# Altium schematic symbol library Master.SchLib: 262 symbols (part 2 of 2)
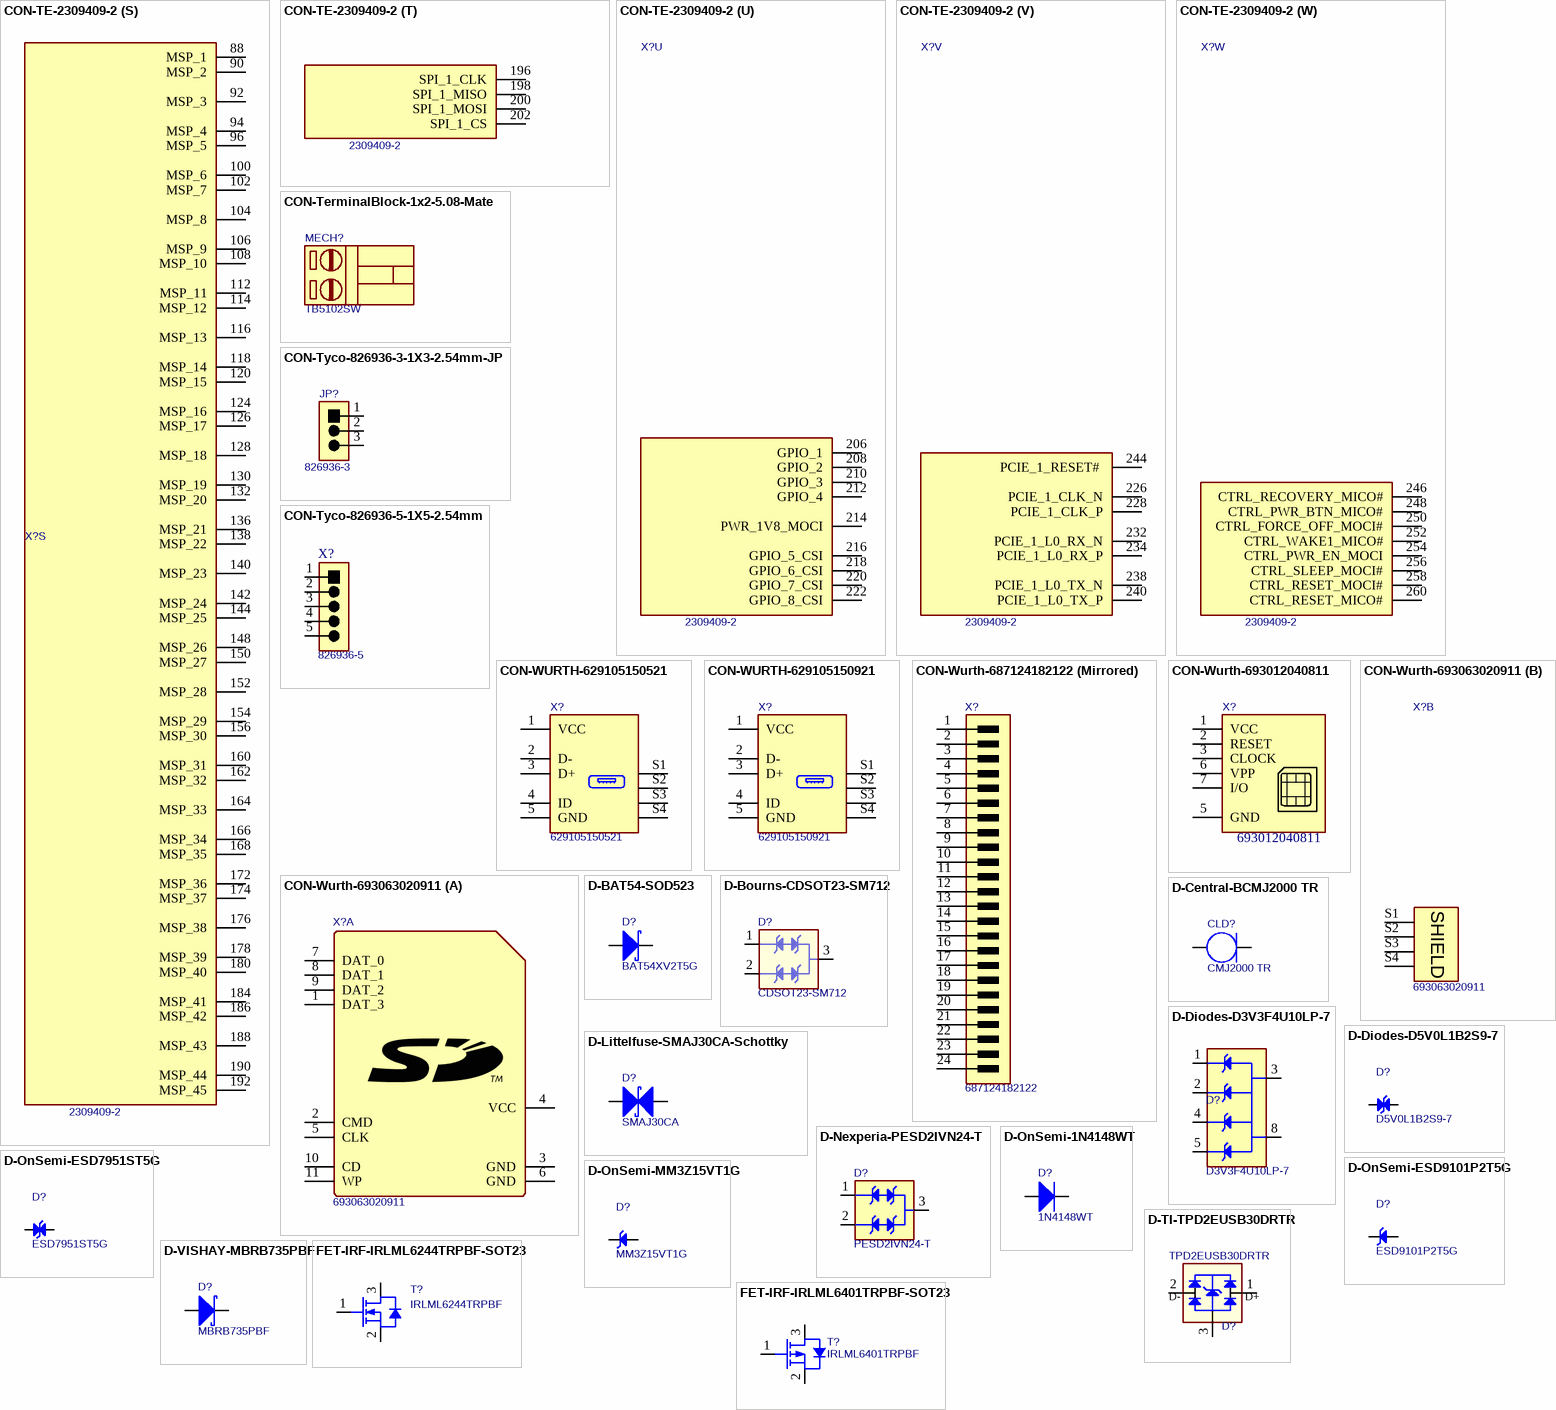
[diagram p18: symbols CON-TE-2309409-2 to FET-IRF-IRLML6401TRPBF-SOT23]

## D-OnSemi-1N4148WT
designator D?, comment 1N4148WT
Diode Standard 75V 200mA Surface Mount SOD-523F; Manufacturer Name: On Semi; Manufacturer Part No.: 1N4148WT
footprint SOD-523F (SOD-523F 2-Leads, Body 0.80x1.60mm, IPC Medium Density)
pins: A, C

## D-OnSemi-ESD7951ST5G
designator D?, comment ESD7951ST5G
BIDIRECTIONAL TVS DIODE 5V 12.9V SOD923; Manufacturer Name: OnSemi; Manufacturer Part No.: ESD7951ST5G
footprint SOD-923 (SOD-923, 2-Leads, Body 0.60x1.00mm, IPC Medium Density)
pins: 1 C (power), 2 A (power)

## D-OnSemi-ESD9101P2T5G
designator D?, comment ESD9101P2T5G
ESD Protection Diode; Manufacturer Name: OnSemi; Manufacturer Part No.: ESD9101P2T5G
footprint SOD-923 (SOD-923, 2-Leads, Body 0.60x1.00mm, IPC Medium Density)
pins: 1 C (power), 2 A (power)

## D-OnSemi-MM3Z15VT1G
designator D?, comment MM3Z15VT1G
Zener Diode, Vz=15V, 300mW, SOD-323; Manufacturer Name: ON Semiconductor; Manufacturer Part No.: MM3Z15VT1G
footprint T_SOD-323 (SOD-323, SMD, 2 pins)
pins: 1 C (power), 2 A (power)

## D-TI-TPD2EUSB30DRTR
designator D?, comment TPD2EUSB30DRTR
2 Channel Protection for Super Speed USB3.0; Manufacturer Name: TI; Manufacturer Part No.: TPD2EUSB30DRTR
footprint T_TI_TPD2EUSB30DRTR (2 CHANNEL PROTECTION SOLUTION FOR SUPER-SPEED)
pins: 1 D+ (power), 2 D- (power), 3 (power)

## D-VISHAY-MBRB735PBF
designator D?, comment MBRB735PBF
MBRB735PBF Schottky Diode; Manufacturer Name: Vishay; Manufacturer Part No.: MBRB735PBF
footprint T_VISHAY_MBRB735PBF
pins: 2, 3

## FET-IRF-IRLML6244TRPBF-SOT23
designator T?, comment IRLML6244TRPBF
N-channel +12V / 5.1A / 21mohm; Manufacturer Name: International Rectifier; Manufacturer Part No.: IRLML6244TRPBF
footprint SOT95P237X112-3N (SOT23, 3-Leads, Body 3.0x2.6mm (max), Pitch 0.95mm, IPC Medium Density)
pins: 1 G, 2 S, 3 D

## FET-IRF-IRLML6401TRPBF-SOT23
designator T?, comment IRLML6401TRPBF
P-channel -12V / 3.4A / 50mohm; Manufacturer Name: International Rectifier; Manufacturer Part No.: IRLML6401TRPBF
footprint SOT95P237X112-3N (SOT23, 3-Leads, Body 3.0x2.6mm (max), Pitch 0.95mm, IPC Medium Density)
pins: 1 G, 2 S, 3 D

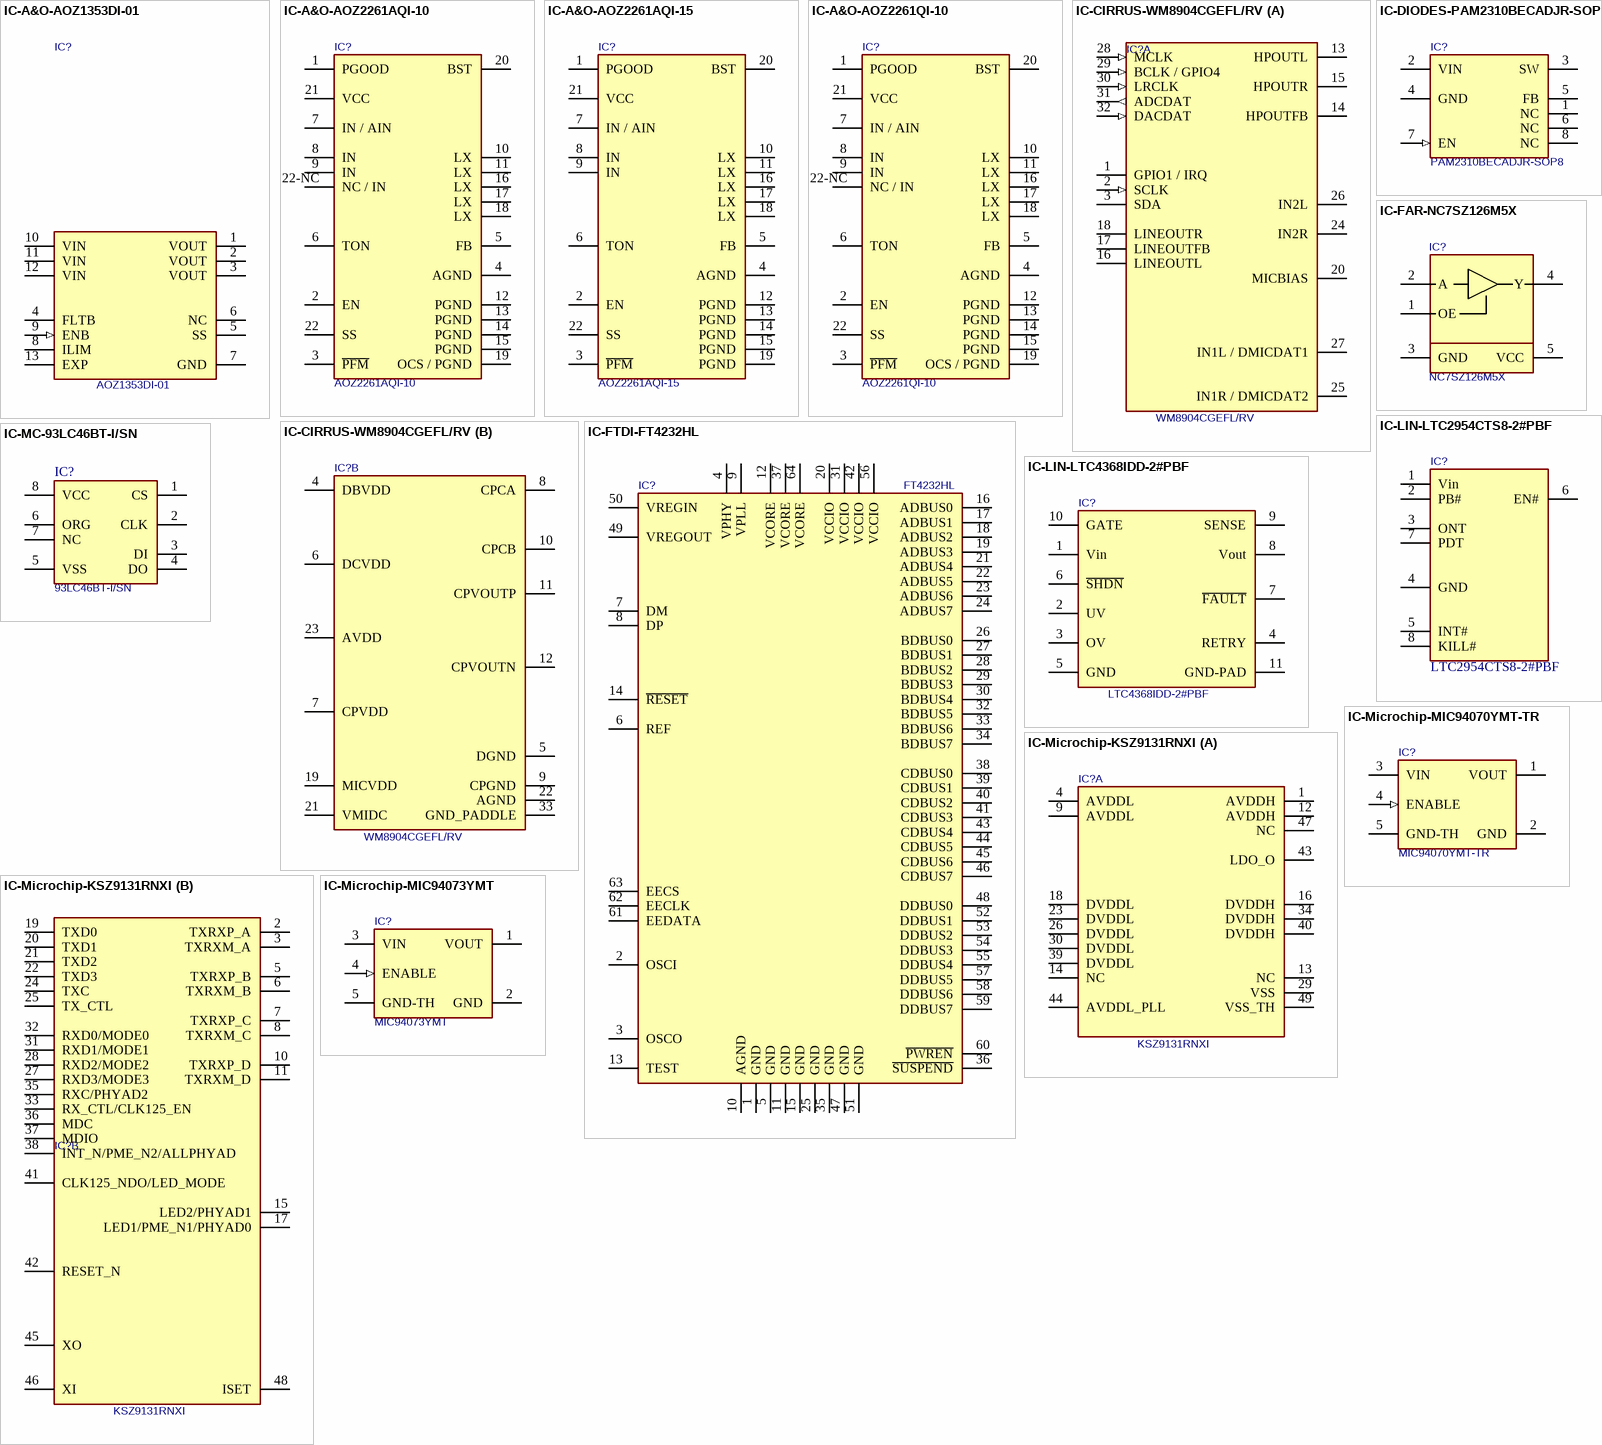
[diagram p12: symbols IC-A&O-AOZ1353DI-01 to IC-Microchip-MIC94073YMT]

## IC-A&O-AOZ1353DI-01
designator IC?, comment AOZ1353DI-01
5V/3A  Smart Current Limited Load Switch with True Reverse Current Blocking; Manufacturer Name: Alpha and Omega; Manufacturer Part No.: AOZ1353DI-01
footprint IC-A&O-AOZ1353DI-01 (PSON, 12-Leads, Body 3.00x3.00mm, Pitch 0.50mm, Thermal Pad 2.50x1.50mm, IPC Medium Density)
pins: 1 VOUT (power), 2 VOUT (power), 3 VOUT (power), 4 FLTB, 5 SS, 6 NC, 7 GND (power), 8 ILIM, 9 ENB (in), 10 VIN (power), 11 VIN (power), 12 VIN (power), 13 EXP (power)

## IC-A&O-AOZ2261AQI-10
designator IC?, comment AOZ2261AQI-10
8A (Iout(max)) Synchronous Buck Regulator, QFN-22L (4mmx 4mm), Vin = 4V to 28V; Manufacturer Name: Alpha and Omega; Manufacturer Part No.: AOZ2261AQI-10
footprint T_QFN50P400X400X100-23N (AOZ226x) - PIN22-NC_NOPASTE (QFN, 23-Leads, Body 4.1x4.1mm (max), Pitch 0.50mm, IPC Medium Density)
footprint T_QFN50P400X400X100-22N (QFN, 22-Leads, Body 4.1x4.1mm (max), Pitch 0.50mm, IPC Medium Density)
pins: 1 PGOOD (power), 2 EN (power), 3 ~{PFM} (power), 4 AGND (power), 5 FB (power), 6 TON (power), 7 IN / AIN (power), 8 IN (power), 9 IN (power), 10 LX (power), 11 LX (power), 12 PGND (power), 13 PGND (power), 14 PGND (power), 15 PGND (power), 16 LX (power), 17 LX (power), 18 LX (power), 19 OCS / PGND (power), 20 BST (power), 21 VCC (power), 22 SS (power), 22-NC NC / IN (power)

## IC-A&O-AOZ2261AQI-15
designator IC?, comment AOZ2261AQI-15
8A (Iout(max)) Synchronous Buck Regulator, QFN-22L (4mmx 4mm), Vin = 4V to 28V; Manufacturer Name: Alpha and Omega; Manufacturer Part No.: AOZ2261AQI-15
footprint T_QFN50P400X400X100-22N
pins: 1 PGOOD (power), 2 EN (power), 3 ~{PFM} (power), 4 AGND (power), 5 FB (power), 6 TON (power), 7 IN / AIN (power), 8 IN (power), 9 IN (power), 10 LX (power), 11 LX (power), 12 PGND (power), 13 PGND (power), 14 PGND (power), 15 PGND (power), 16 LX (power), 17 LX (power), 18 LX (power), 19 PGND (power), 20 BST (power), 21 VCC (power), 22 SS (power)

## IC-A&O-AOZ2261QI-10
designator IC?, comment AOZ2261QI-10
8A (Iout(max)) Synchronous Buck Regulator, QFN-22L (4mmx 4mm), Vin = 6.5V to 28V; Manufacturer Name: Alpha and Omega; Manufacturer Part No.: AOZ2261QI-10
footprint T_QFN50P400X400X100-23N (AOZ226x) - PIN22-NC_NOPASTE (QFN, 23-Leads, Body 4.1x4.1mm (max), Pitch 0.50mm, IPC Medium Density)
footprint T_QFN50P400X400X100-22N (QFN, 22-Leads, Body 4.1x4.1mm (max), Pitch 0.50mm, IPC Medium Density)
pins: 1 PGOOD (power), 2 EN (power), 3 ~{PFM} (power), 4 AGND (power), 5 FB (power), 6 TON (power), 7 IN / AIN (power), 8 IN (power), 9 IN (power), 10 LX (power), 11 LX (power), 12 PGND (power), 13 PGND (power), 14 PGND (power), 15 PGND (power), 16 LX (power), 17 LX (power), 18 LX (power), 19 OCS / PGND (power), 20 BST (power), 21 VCC (power), 22 SS (power), 22-NC NC / IN (power)

## IC-CIRRUS-WM8904CGEFL/RV
designator IC?, comment WM8904CGEFL/RV
Stereo Audio Interface IC; Manufacturer Name: CIRRUS; Package: *; Temperature Range: *; Manufacturer Part No.: WM8904CGEFL/RV
footprint IC-QFN40P400X400X80_HS-33N (QFN, 32-Leads, Body 4.00x4.00mm, Pitch 0.40mm, Thermal Pad 2.70x2.70mm, IPC Medium Density)
part A pins: 1 GPIO1 / IRQ, 2 SCLK (in), 3 SDA, 13 HPOUTL, 14 HPOUTFB, 15 HPOUTR, 16 LINEOUTL, 17 LINEOUTFB, 18 LINEOUTR, 20 MICBIAS, 24 IN2R, 25 IN1R / DMICDAT2, 26 IN2L, 27 IN1L / DMICDAT1, 28 MCLK (in), 29 BCLK / GPIO4 (in), 30 LRCLK (in), 31 ADCDAT (out), 32 DACDAT (in)
part B pins: 4 DBVDD, 5 DGND, 6 DCVDD, 7 CPVDD, 8 CPCA, 9 CPGND, 10 CPCB, 11 CPVOUTP, 12 CPVOUTN, 19 MICVDD, 21 VMIDC, 22 AGND, 23 AVDD, 33 GND_PADDLE

## IC-DIODES-PAM2310BECADJR-SOP8
designator IC?, comment Manufacturer Part No.: PAM2310BECADJR-SOP8  (hidden comment: PAM2310BECADJR)
Integrated Buck Regulator; Manufacturer Name: Diodes
footprint IC-SO-8EP
pins: 1 NC (power), 2 VIN (power), 3 SW (power), 4 GND (power), 5 FB (power), 6 NC (power), 7 EN (in), 8 NC (power)

## IC-FAR-NC7SZ126M5X
designator IC?, comment NC7SZ126M5X
NC7SZ126M5X  Buffer Three-State Output; Manufacturer Name: Fairchild Semiconductor; Manufacturer Part No.: NC7SZ126M5X
footprint SOT95P279X142-5N
pins: 1 OE, 2 A, 3 GND, 4 Y, 5 VCC

## IC-FTDI-FT4232HL
designator IC?, comment FT4232HL
Quad High Speed USB to Multipurpose UART/MPSSE; Manufacturer Name: FTDI; Note: Quad USB to UART; Manufacturer Part No.: FT4232HL
footprint LQFP-64
pins: 1 GND, 2 OSCI, 3 OSCO, 4 VPHY, 5 GND, 6 REF, 7 DM, 8 DP, 9 VPLL, 10 AGND, 11 GND, 12 VCORE, 13 TEST, 14 ~{RESET}, 15 GND, 16 ADBUS0, 17 ADBUS1, 18 ADBUS2, 19 ADBUS3, 20 VCCIO, 21 ADBUS4, 22 ADBUS5, 23 ADBUS6, 24 ADBUS7, 25 GND, 26 BDBUS0, 27 BDBUS1, 28 BDBUS2, 29 BDBUS3, 30 BDBUS4, 31 VCCIO, 32 BDBUS5, 33 BDBUS6, 34 BDBUS7, 35 GND, 36 ~{SUSPEND}, 37 VCORE, 38 CDBUS0, 39 CDBUS1, 40 CDBUS2, 41 CDBUS3, 42 VCCIO, 43 CDBUS4, 44 CDBUS5, 45 CDBUS6, 46 CDBUS7, 47 GND, 48 DDBUS0, 49 VREGOUT, 50 VREGIN, 51 GND, 52 DDBUS1, 53 DDBUS2, 54 DDBUS3, 55 DDBUS4, 56 VCCIO, 57 DDBUS5, 58 DDBUS6, 59 DDBUS7, 60 ~{PWREN}, 61 EEDATA, 62 EECLK, 63 EECS, 64 VCORE
2 alternate drawings of the same symbol

## IC-LIN-LTC2954CTS8-2#PBF
designator IC?, comment LTC2954CTS8-2#PBF
Push Button On/Off Controller; Manufacturer Name: Linear; Package: *; Temperature Range: *; Manufacturer Part No.: LTC2954CTS8-2#PBF
footprint T_LINEAR_LTC2954CTS8-2#PBF
pins: 1 Vin, 2 PB#, 3 ONT, 4 GND, 5 INT#, 6 EN#, 7 PDT, 8 KILL#

## IC-LIN-LTC4368IDD-2#PBF
designator IC?, comment LTC4368IDD-2#PBF
Reverse Protection Controller with Bidirectional Circuit Breaker; Manufacturer Name: Linear; Package: *; Temperature Range: *; Manufacturer Part No.: LTC4368IDD-2#PBF
footprint IC-DFN50P300X300X75-10N (DFN, 11-Leads, Body 3.0x3.0mm, Pitch 0.50mm, IPC Medium Density)
pins: 1 Vin, 2 UV, 3 OV, 4 RETRY, 5 GND, 6 ~{SHDN}, 7 ~{FAULT}, 8 Vout, 9 SENSE, 10 GATE, 11 GND-PAD

## IC-MC-93LC46BT-I/SN
designator IC?, comment Manufacturer Part No.: 93LC46BT-I/SN  (hidden comment: 93LC46BT)
EEPROM, 1k, 64x16, serial, SOIC8; Manufacturer Name: Microchip
footprint SOIC127P600X173-8N
pins: 1 CS, 2 CLK, 3 DI, 4 DO, 5 VSS, 6 ORG, 7 NC, 8 VCC

## IC-Microchip-KSZ9131RNXI
designator IC?, comment KSZ9131RNXI
Gigabit Ethernet Transceiver with RGMII (KSZ9131), QFN-48 (7mmx7mm) Leadless, -40C to +85C; Manufacturer Name: Microchip; Temperature Range: -40C to +85C; Manufacturer Part No.: KSZ9131RNXI
footprint IC-QFN50P700X700X90_HS-49N (QFN, 48-Leads, Body 7.00x7.00mm, Pitch 0.50mm, Thermal Pad 5.05x5.05mm, IPC Medium Density)
part A pins: 1 AVDDH (power), 4 AVDDL (power), 9 AVDDL (power), 12 AVDDH (power), 13 NC (power), 14 NC (power), 16 DVDDH (power), 18 DVDDL (power), 23 DVDDL (power), 26 DVDDL (power), 29 VSS (power), 30 DVDDL (power), 34 DVDDH (power), 39 DVDDL (power), 40 DVDDH (power), 43 LDO_O (power), 44 AVDDL_PLL (power), 47 NC (power), 49 VSS_TH (power)
part B pins: 2 TXRXP_A (power), 3 TXRXM_A (power), 5 TXRXP_B (power), 6 TXRXM_B (power), 7 TXRXP_C (power), 8 TXRXM_C (power), 10 TXRXP_D (power), 11 TXRXM_D (power), 15 LED2/PHYAD1 (power), 17 LED1/PME_N1/PHYAD0 (power), 19 TXD0 (power), 20 TXD1 (power), 21 TXD2 (power), 22 TXD3 (power), 24 TXC (power), 25 TX_CTL (power), 27 RXD3/MODE3 (power), 28 RXD2/MODE2 (power), 31 RXD1/MODE1 (power), 32 RXD0/MODE0 (power), 33 RX_CTL/CLK125_EN (power), 35 RXC/PHYAD2 (power), 36 MDC (power), 37 MDIO (power), 38 INT_N/PME_N2/ALLPHYAD (power), 41 CLK125_NDO/LED_MODE (power), 42 RESET_N (power), 45 XO (power), 46 XI (power), 48 ISET (power)

## IC-Microchip-MIC94070YMT-TR
designator IC?, comment MIC94070YMT-TR
High Side Load Switch, TDFN4 1.2 x 1.6; Manufacturer Name: Microchip; Package: TDFN-4; Manufacturer Part No.: MIC94070YMT-TR
footprint T_TDFN0P120X160X60-4N (TDFN, 4-Leads, Body 1.6x1.2mm (max), Pitch 0.50mm, IPC Medium Density)
pins: 1 VOUT (power), 2 GND (power), 3 VIN (power), 4 ENABLE (in), 5 GND-TH (power)

## IC-Microchip-MIC94073YMT
designator IC?, comment MIC94073YMT
High Side Load Switch, TDFN4 1.2 x 1.6; Manufacturer Name: Microchip; Package: TDFN-4; Manufacturer Part No.: MIC94073YMT
footprint T_TDFN0P120X160X60-4N (TDFN, 4-Leads, Body 1.6x1.2mm (max), Pitch 0.50mm, IPC Medium Density)
pins: 1 VOUT (power), 2 GND (power), 3 VIN (power), 4 ENABLE (in), 5 GND-TH (power)

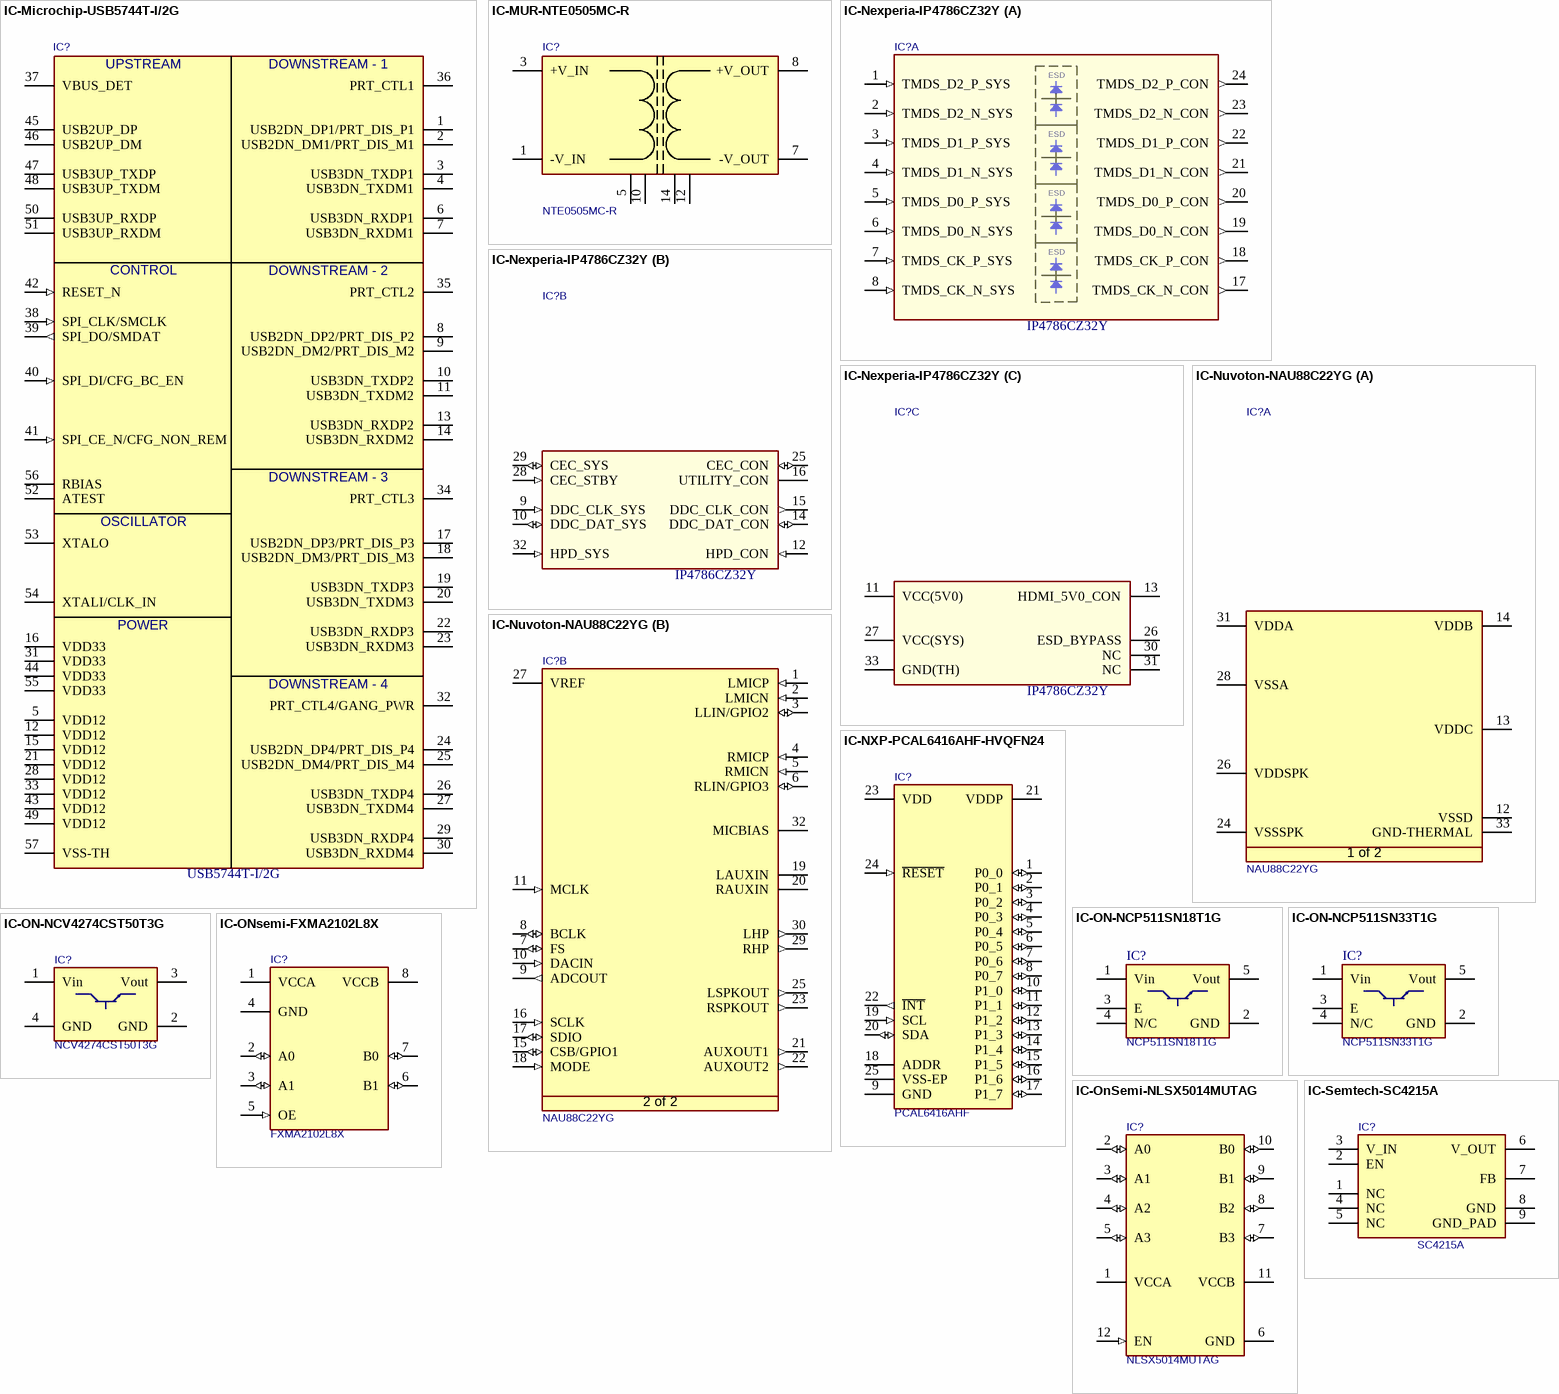
[diagram p13: symbols IC-Microchip-USB5744T-I/2G to IC-Semtech-SC4215A]

## IC-Microchip-USB5744T-I/2G
designator IC?, comment USB5744T-I/2G
4-Port SS/HS USB 3.0 Controller Hub, VQFN-56, -40C to +85C; Manufacturer Name: Microchip; Temperature Range: -40C to +85C; Package: VQFN-56, Leadless (7mm x 7mm); Manufacturer Part No.: USB5744T-I/2G
footprint IC-QFN40P700X700X100_HS-57N (QFN, 56-Leads, Body 7.00x7.00mm, Pitch 0.40mm, Thermal Pad 4.60x4.60mm, IPC Medium Density)
pins: 1 USB2DN_DP1/PRT_DIS_P1, 2 USB2DN_DM1/PRT_DIS_M1, 3 USB3DN_TXDP1, 4 USB3DN_TXDM1, 5 VDD12 (power), 6 USB3DN_RXDP1, 7 USB3DN_RXDM1, 8 USB2DN_DP2/PRT_DIS_P2, 9 USB2DN_DM2/PRT_DIS_M2, 10 USB3DN_TXDP2, 11 USB3DN_TXDM2, 12 VDD12 (power), 13 USB3DN_RXDP2, 14 USB3DN_RXDM2, 15 VDD12 (power), 16 VDD33 (power), 17 USB2DN_DP3/PRT_DIS_P3, 18 USB2DN_DM3/PRT_DIS_M3, 19 USB3DN_TXDP3, 20 USB3DN_TXDM3, 21 VDD12 (power), 22 USB3DN_RXDP3, 23 USB3DN_RXDM3, 24 USB2DN_DP4/PRT_DIS_P4, 25 USB2DN_DM4/PRT_DIS_M4, 26 USB3DN_TXDP4, 27 USB3DN_TXDM4, 28 VDD12 (power), 29 USB3DN_RXDP4, 30 USB3DN_RXDM4, 31 VDD33 (power), 32 PRT_CTL4/GANG_PWR, 33 VDD12 (power), 34 PRT_CTL3, 35 PRT_CTL2, 36 PRT_CTL1, 37 VBUS_DET, 38 SPI_CLK/SMCLK (in), 39 SPI_DO/SMDAT (out), 40 SPI_DI/CFG_BC_EN (in), 41 SPI_CE_N/CFG_NON_REM (in), 42 RESET_N (in), 43 VDD12 (power), 44 VDD33 (power), 45 USB2UP_DP, 46 USB2UP_DM, 47 USB3UP_TXDP, 48 USB3UP_TXDM, 49 VDD12 (power), 50 USB3UP_RXDP, 51 USB3UP_RXDM, 52 ATEST, 53 XTALO, 54 XTALI/CLK_IN, 55 VDD33 (power), 56 RBIAS, 57 VSS-TH (power)
text: UPSTREAM; DOWNSTREAM - 1; CONTROL; DOWNSTREAM - 2; DOWNSTREAM - 3; OSCILLATOR; POWER; DOWNSTREAM - 4

## IC-MUR-NTE0505MC-R
designator IC?, comment NTE0505MC-R
Isolated DC/DC Converter; Manufacturer Name: Murata; Manufacturer Part No.: NTE0505MC-R
footprint T_MURATA_NTE0505MC-R (Isolated DC/DC converter)
pins: 1 -V_IN (power), 3 +V_IN (power), 5 NC, 7 -V_OUT (power), 8 +V_OUT (power), 10 NC, 12 NC, 14 NC

## IC-Nexperia-IP4786CZ32Y
designator IC?, comment IP4786CZ32Y
HDMI ESD protection and Level Shifter, SMD leadless QFN32, 5mm X 5mm X 0.85mm; Manufacturer Name: Nexperia; Temperature Range: -25C to +85C; Package: HVQRN32 (5mmx5mm); Manufacturer Part No.: IP4786CZ32Y
footprint IC-QFN50P500X500X85-32M (HVQFN32 (SOT617-3), 32-Leads, Body 5.1x5.1mm (max), Pitch 0.50mm, IPC Low Density)
part A pins: 1 TMDS_D2_P_SYS (in), 2 TMDS_D2_N_SYS (in), 3 TMDS_D1_P_SYS (in), 4 TMDS_D1_N_SYS (in), 5 TMDS_D0_P_SYS (in), 6 TMDS_D0_N_SYS (in), 7 TMDS_CK_P_SYS (in), 8 TMDS_CK_N_SYS (in), 17 TMDS_CK_N_CON (out), 18 TMDS_CK_P_CON (out), 19 TMDS_D0_N_CON (out), 20 TMDS_D0_P_CON (out), 21 TMDS_D1_N_CON (out), 22 TMDS_D1_P_CON (out), 23 TMDS_D2_N_CON (out), 24 TMDS_D2_P_CON (out)
part B pins: 9 DDC_CLK_SYS (in), 10 DDC_DAT_SYS (io), 12 HPD_CON (in), 14 DDC_DAT_CON (io), 15 DDC_CLK_CON (out), 16 UTILITY_CON (power), 25 CEC_CON (io), 28 CEC_STBY (in), 29 CEC_SYS (io), 32 HPD_SYS (in)
part C pins: 11 VCC(5V0) (power), 13 HDMI_5V0_CON (power), 26 ESD_BYPASS (power), 27 VCC(SYS) (power), 30 NC, 31 NC, 33 GND(TH) (power)
part A text: ESD

## IC-Nuvoton-NAU88C22YG
designator IC?, comment NAU88C22YG
Stereo Audio Codec (24-bit ) with Speaker Driver, QFN-32, -40°C to +85°C; Manufacturer Name: Nuvoton; Package: QFN32 (5mmX5mm); Temperature Range: -40°C to +85°C; Manufacturer Part No.: NAU88C22YG
footprint QFN50P500X500X80_HS-33N (QFN, 32-Leads, Body 5.00x5.00mm, Pitch 0.50mm, Thermal Pad 3.50x3.50mm, IPC Medium Density)
part A pins: 12 VSSD (power), 13 VDDC (power), 14 VDDB (power), 24 VSSSPK (power), 26 VDDSPK (power), 28 VSSA (power), 31 VDDA (power), 33 GND-THERMAL (power)
part B pins: 1 LMICP (in), 2 LMICN (in), 3 LLIN/GPIO2 (io), 4 RMICP (in), 5 RMICN (in), 6 RLIN/GPIO3 (io), 7 FS (io), 8 BCLK (io), 9 ADCOUT (out), 10 DACIN (in), 11 MCLK (in), 15 CSB/GPIO1 (io), 16 SCLK (in), 17 SDIO (io), 18 MODE (in), 19 LAUXIN, 20 RAUXIN, 21 AUXOUT1 (out), 22 AUXOUT2 (out), 23 RSPKOUT (out), 25 LSPKOUT (out), 27 VREF (power), 29 RHP (out), 30 LHP (out), 32 MICBIAS
part A text: 1 of 2
part B text: 2 of 2

## IC-NXP-PCAL6416AHF-HVQFN24
designator IC?, comment PCAL6416AHF
Low-voltage translating 16-bit I2C-bus/SMBus I/O expander; Manufacturer Name: NXP; Manufacturer Part No.: PCAL6416AHF
footprint IC-QFN50P400X400X80_HS-25N (QFN, 24-Leads, Body 4.00x4.00mm, Pitch 0.50mm, Thermal Pad 2.10x2.10mm, IPC Medium Density)
pins: 1 P0_0 (io), 2 P0_1 (io), 3 P0_2 (io), 4 P0_3 (io), 5 P0_4 (io), 6 P0_5 (io), 7 P0_6 (io), 8 P0_7 (io), 9 GND (power), 10 P1_0 (io), 11 P1_1 (io), 12 P1_2 (io), 13 P1_3 (io), 14 P1_4 (io), 15 P1_5 (io), 16 P1_6 (io), 17 P1_7 (io), 18 ADDR, 19 SCL (in), 20 SDA (io), 21 VDDP (power), 22 ~{INT} (out), 23 VDD (power), 24 ~{RESET} (in), 25 VSS-EP (power)

## IC-ON-NCP511SN18T1G
designator IC?, comment NCP511SN18T1G
NCP511SN18T1G LDO Regulator; Manufacturer Name: ON Semiconductor; Manufacturer Part No.: NCP511SN18T1G
footprint SOT95P279X142-5N
pins: 1 Vin, 2 GND, 3 E, 4 N/C, 5 Vout

## IC-ON-NCP511SN33T1G
designator IC?, comment NCP511SN33T1G
NCP511SN33T1G LDO Regulator; Manufacturer Name: ON Semiconductor; Manufacturer Part No.: NCP511SN33T1G
footprint SOT95P279X142-5N
pins: 1 Vin, 2 GND, 3 E, 4 N/C, 5 Vout

## IC-ON-NCV4274CST50T3G
designator IC?, comment NCV4274CST50T3G
LDO regulator, Vout = 5V, Iout(max) = 0.4A, Vin = 5.5V to 40V, SOT-223; Manufacturer Name: ON Semiconductor; Manufacturer Part No.: NCV4274CST50T3G
footprint T_ON_NCV4264-2ST50T3G (SO4)
pins: 1 Vin, 2 GND, 3 Vout, 4 GND

## IC-ONsemi-FXMA2102L8X
designator IC?, comment FXMA2102L8X
Voltage Level Translator for I2C Applications; Manufacturer Name: ONSemi; Manufacturer Part No.: FXMA2102L8X
footprint IC-MicroPak50P160X2160X55-8N (MicroPak, 8-Leads, Body 1.60x1.60mm, Pitch 0.5mm, IPC Medium Density)
pins: 1 VCCA (power), 2 A0 (io), 3 A1 (io), 4 GND (power), 5 OE (in), 6 B1 (io), 7 B0 (io), 8 VCCB (power)

## IC-OnSemi-NLSX5014MUTAG
designator IC?, comment NLSX5014MUTAG
4 Bit Bidirectional l Voltage Level Translator, Auto Direction Sensing, UFQFN-12 package; Manufacturer Name: OnSemi; Manufacturer Part No.: NLSX5014MUTAG
footprint T_UFQFN_12 (UFQFN-12, 2.0mm X 1.7mm, lead-less package)
pins: 1 VCCA (power), 2 A0 (io), 3 A1 (io), 4 A2 (io), 5 A3 (io), 6 GND (power), 7 B3 (io), 8 B2 (io), 9 B1 (io), 10 B0 (io), 11 VCCB (power), 12 EN (in)

## IC-Semtech-SC4215A
designator IC?  Manufacturer Part No.: SC4215A  (hidden comment: IC-Semtech-SC4215A)
LDO TO 2A; Manufacturer Name: Semtech; Package: *; Temperature Range: *
footprint IC-SOIC127P650X175_HS-8N (SOIC, 8-Leads, Body 5.0x4.0mm (max), Pitch 1.27mm, IPC Medium Density)
pins: 1 NC, 2 EN, 3 V_IN, 4 NC, 5 NC, 6 V_OUT, 7 FB, 8 GND, 9 GND_PAD

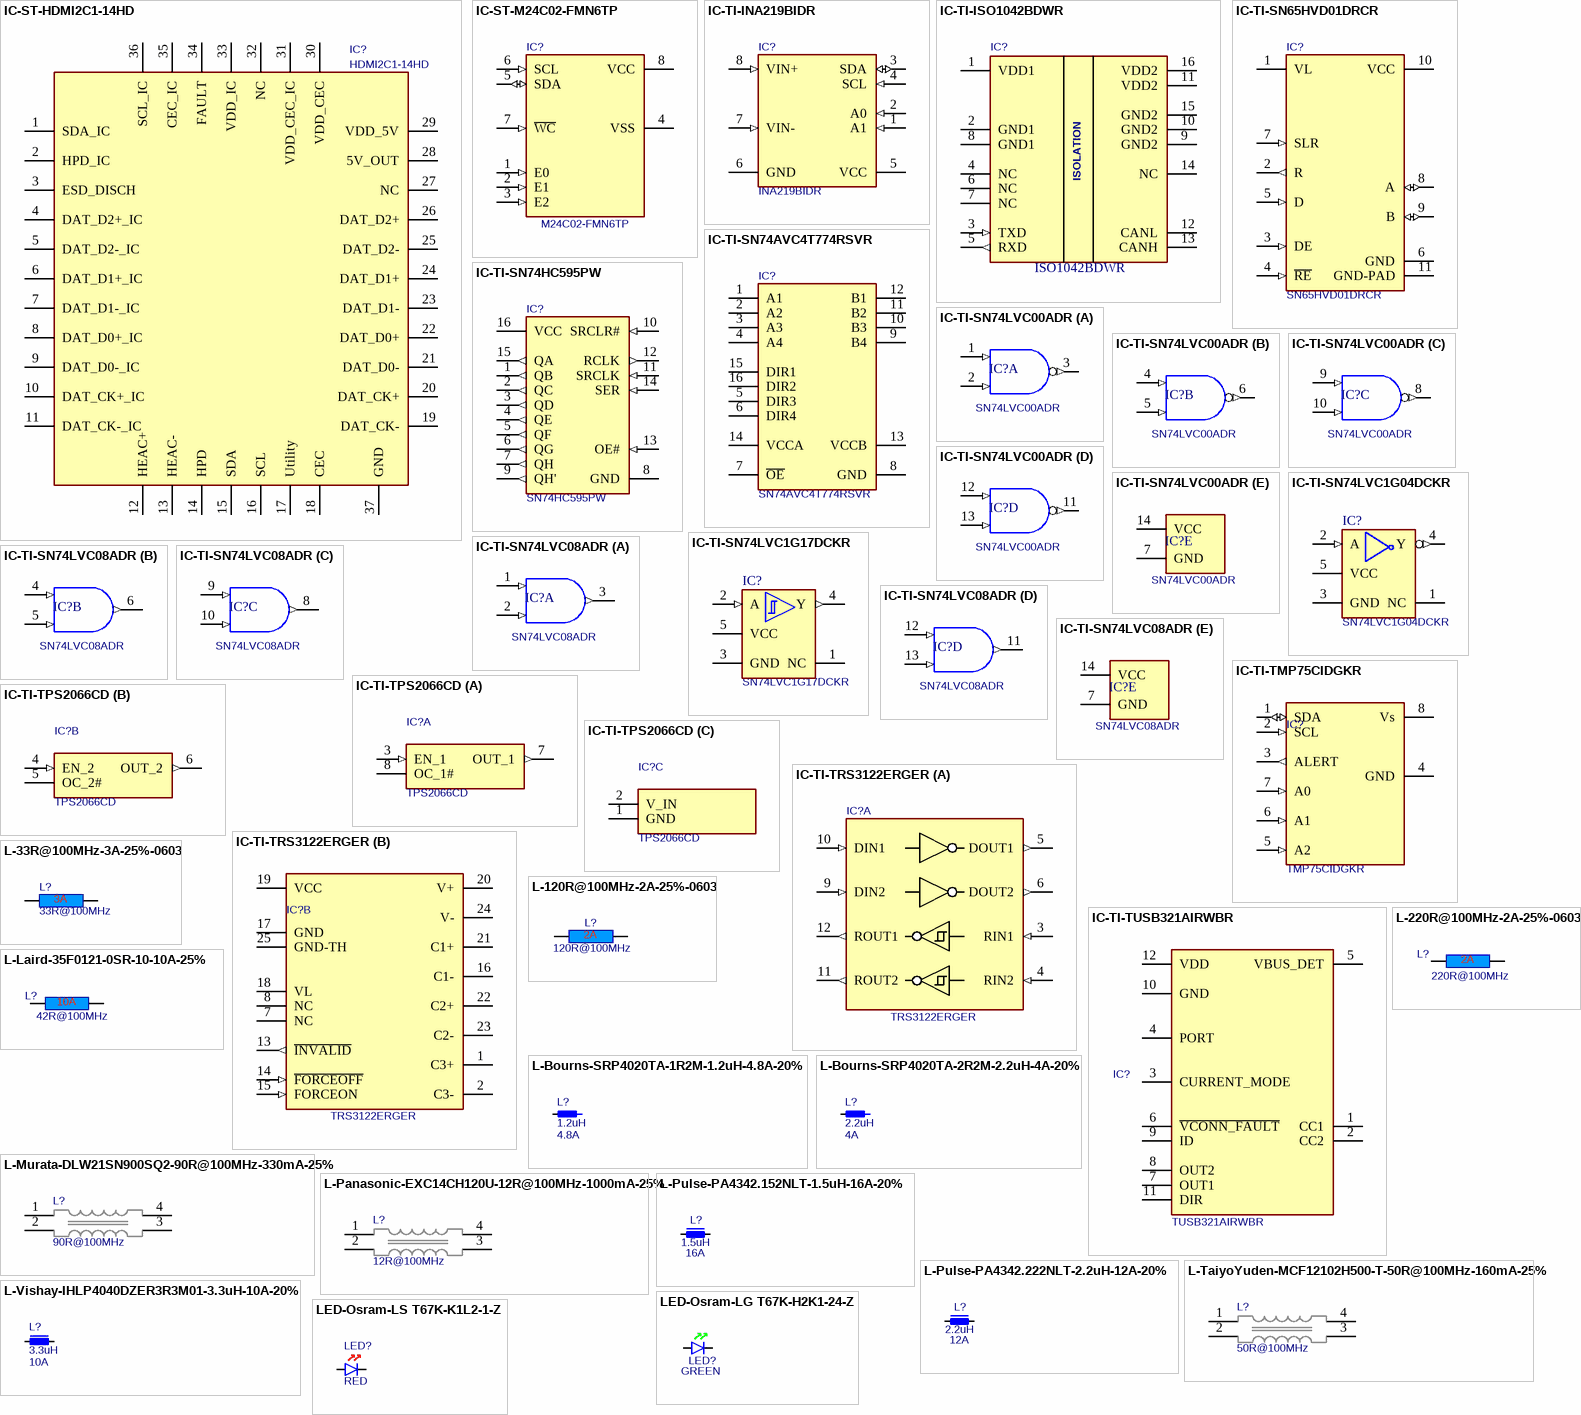
[diagram p14: symbols IC-ST-HDMI2C1-14HD to LED-Osram-LS T67K-K1L2-1-Z]

## IC-ST-HDMI2C1-14HD
designator IC?, comment HDMI2C1-14HD
ESD protection and signal conditioning for HDMI™ 2.0 source interface; Manufacturer Name: STMicroelectronics; Manufacturer Part No.: HDMI2C1-14HD
footprint QFN50P350X650X95_HS-37N (QFN, 36-Leads, Body 3.50x6.50mm, Pitch 0.50mm, Thermal Pad 2.30x5.30mm, IPC Medium Density)
pins: 1 SDA_IC, 2 HPD_IC, 3 ESD_DISCH, 4 DAT_D2+_IC, 5 DAT_D2-_IC, 6 DAT_D1+_IC, 7 DAT_D1-_IC, 8 DAT_D0+_IC, 9 DAT_D0-_IC, 10 DAT_CK+_IC, 11 DAT_CK-_IC, 12 HEAC+, 13 HEAC-, 14 HPD, 15 SDA, 16 SCL, 17 Utility, 18 CEC, 19 DAT_CK-, 20 DAT_CK+, 21 DAT_D0-, 22 DAT_D0+, 23 DAT_D1-, 24 DAT_D1+, 25 DAT_D2-, 26 DAT_D2+, 27 NC, 28 5V_OUT (power), 29 VDD_5V (power), 30 VDD_CEC, 31 VDD_CEC_IC, 32 NC, 33 VDD_IC (power), 34 FAULT, 35 CEC_IC, 36 SCL_IC, 37 GND (power)

## IC-ST-M24C02-FMN6TP
designator IC?, comment M24C02-FMN6TP
EEPROM, Serial I²C bus , SOIC-8, -40C to +85C; Manufacturer Name: ST; Temperature Range: -40C to +85C; Package: SOIC-8 (3.9mm x4.9 mm); Manufacturer Part No.: M24C02-FMN6TP
footprint IC-SOIC-8N (SOCI-8/SO8N – 3.9x4.9 mm, 8 lead)
pins: 1 E0 (in), 2 E1 (in), 3 E2 (in), 4 VSS (power), 5 SDA (io), 6 SCL (in), 7 ~{WC} (in), 8 VCC (power)

## IC-TI-INA219BIDR
designator IC?, comment Manufacturer Part No.: INA219BIDR  (hidden comment: INA219)
CURRENT/POWER MONITOR with I2C Interface; Manufacturer Name: Texas Instruments
footprint SOIC127P600X173-8N
pins: 1 A1 (in), 2 A0 (in), 3 SDA (io), 4 SCL (in), 5 VCC (power), 6 GND (power), 7 VIN- (in), 8 VIN+ (in)

## IC-TI-ISO1042BDWR
designator IC?, comment ISO1042BDWR
Isolated CAN Transceiver with 70-V Bus Fault Protection and FD Rate, SOIC-16-Wide, -40C to +125C; Manufacturer Name: TI; Temperature Range: -40C to +125C; Package: SOIC-16-W (10.3mm x 7.5mm); Manufacturer Part No.: ISO1042BDWR
footprint IC-SOIC-16-W (SOP, 16-Leads, Body 10.30x7.50mm, Pitch 1.27mm, IPC Medium Density)
pins: 1 VDD1 (power), 2 GND1 (power), 3 TXD (in), 4 NC, 5 RXD (out), 6 NC, 7 NC, 8 GND1 (power), 9 GND2 (power), 10 GND2 (power), 11 VDD2 (power), 12 CANL, 13 CANH, 14 NC, 15 GND2 (power), 16 VDD2 (power)
text: ISOLATION

## IC-TI-SN65HVD01DRCR
designator IC?, comment SN65HVD01DRCR
3.3-V RS-485 transceiver with 1.65-V I/O supply & selectable data rate; Manufacturer Name: Texas Instruments; Manufacturer Part No.: SN65HVD01DRCR
footprint IC-VSON50P300X300X100 (VSON, 10-Leads, Body 3.1x3.1mm (max), Pitch 0.5mm, IPC Medium Density)
pins: 1 VL (power), 2 R (out), 3 DE (in), 4 ~{RE} (in), 5 D (in), 6 GND (power), 7 SLR (in), 8 A (io), 9 B (io), 10 VCC (power), 11 GND-PAD (power)

## IC-TI-SN74AVC4T774RSVR
designator IC?, comment SN74AVC4T774RSVR
4 Bit Bidirectional l Voltage Level Translator, Configurable Direction, UFQFN-16 package; Manufacturer Name: Texas Instruments; Manufacturer Part No.: SN74AVC4T774RSVR
footprint IC-UQFN40P180X210X55-16N (PQFN, 16-Leads, Body 1.80x2.10mm, Pitch 0.40mm, IPC Medium Density)
pins: 1 A1, 2 A2, 3 A3, 4 A4, 5 DIR3, 6 DIR4, 7 ~{OE}, 8 GND (power), 9 B4, 10 B3, 11 B2, 12 B1, 13 VCCB (power), 14 VCCA (power), 15 DIR1, 16 DIR2

## IC-TI-SN74HC595PW
designator IC?, comment SN74HC595PW
8-Bit Shift Registers With 3-State Output Registers; Manufacturer Name: Texas Instruments; Manufacturer Part No.: SN74HC595PW
footprint IC_TSOP65P640X120-16N (TSOP, 16-Leads, Body 5.00x4.40mm, Pitch 0.65mm, IPC Medium Density)
pins: 1 QB (out), 2 QC (out), 3 QD (out), 4 QE (out), 5 QF (out), 6 QG (out), 7 QH (out), 8 GND (power), 9 QH' (out), 10 SRCLR# (in), 11 SRCLK (in), 12 RCLK (out), 13 OE# (in), 14 SER (in), 15 QA (out), 16 VCC (power)

## IC-TI-SN74LVC00ADR
designator IC?, comment SN74LVC00ADR
Quad 2-Input NAND Gate; Manufacturer Name: Texas Instruments; Manufacturer Part No.: SN74LVC00ADR
footprint SOIC127P600X175-14N (SOIC, 14-Leads, Body 8.65x3.90mm, Pitch 1.27mm, IPC Medium Density)
part A pins: 1 1A (in), 2 1B (in), 3 1Y (out)
part B pins: 4 2A (in), 5 2B (in), 6 2Y (out)
part C pins: 8 3Y (out), 9 3A (in), 10 3B (in)
part D pins: 11 4Y (out), 12 4A (in), 13 4B (in)
part E pins: 7 GND (power), 14 VCC (power)

## IC-TI-SN74LVC1G04DCKR
designator IC?, comment SN74LVC1G04DCKR
Single Inverter Gate; Manufacturer Name: Texas Instruments; Manufacturer Part No.: SN74LVC1G04DCKR
footprint SOT65P210X110-5N
pins: 1 NC, 2 A (in), 3 GND (power), 4 Y (out), 5 VCC (power)

## IC-TI-SN74LVC1G17DCKR
designator IC?, comment SN74LVC1G17DCKR
Single Schmitt-Trigger Buffer; Manufacturer Name: Texas Instruments; Manufacturer Part No.: SN74LVC1G17DCKR
footprint SOT65P210X110-5N
pins: 1 NC, 2 A (in), 3 GND (power), 4 Y (out), 5 VCC (power)

## IC-TI-SN74LVC08ADR
designator IC?, comment SN74LVC08ADR
Quad 2-Input AND Gate; Manufacturer Name: Texas Instruments; Manufacturer Part No.: SN74LVC08ADR
footprint SOIC127P600X175-14N (SOIC, 14-Leads, Body 8.65x3.90mm, Pitch 1.27mm, IPC Medium Density)
part A pins: 1 1A (in), 2 1B (in), 3 1Y (out)
part B pins: 4 2A (in), 5 2B (in), 6 2Y (out)
part C pins: 8 3Y (out), 9 3A (in), 10 3B (in)
part D pins: 11 4Y (out), 12 4A (in), 13 4B (in)
part E pins: 7 GND (power), 14 VCC (power)

## IC-TI-TMP75CIDGKR
designator IC?, comment TMP75CIDGKR
Temperature Sensor Digital, Local -55°C ~ 125°C 11 b 8-VSSOP; Manufacturer Name: Texas Instruments; Manufacturer Part No.: TMP75CIDGKR
footprint IC-TSOP65P490X110-8N (TSOP, 8-Leads, Body 3.00x3.00mm, Pitch 0.65mm, IPC Medium Density)
pins: 1 SDA (io), 2 SCL (in), 3 ALERT (out), 4 GND (power), 5 A2 (in), 6 A1 (in), 7 A0 (in), 8 Vs (power)

## IC-TI-TPS2066CD
designator IC?, comment TPS2066CD
1A Dual High Side Switch (Current Limiting (Fixed), Over Temperature, Reverse Current, UVLO); Manufacturer Name: Texas Instruments; Manufacturer Part No.: TPS2066CD
footprint SOIC127P600X173-8N
part A pins: 3 EN_1 (in), 7 OUT_1 (out), 8 OC_1#
part B pins: 4 EN_2 (in), 5 OC_2#, 6 OUT_2 (out)
part C pins: 1 GND (power), 2 V_IN (power)

## IC-TI-TRS3122ERGER
designator IC?, comment TRS3122ERGER
Dual RS-232 Transceiver (1.8V), VQFN-24, -40C to +85C; Manufacturer Name: TI; Temperature Range: -40C to +85C; Package: VQFN-24 (4mm x 4mm); Manufacturer Part No.: TRS3122ERGER
footprint IC-QFN50P400X400X100_HS-25N (QFN, 24-Leads, Body 4.00x4.00mm, Pitch 0.50mm, Thermal Pad 2.70x2.70mm, IPC Medium Density)
part A pins: 3 RIN1 (in), 4 RIN2 (in), 5 DOUT1 (out), 6 DOUT2 (out), 9 DIN2 (in), 10 DIN1 (in), 11 ROUT2 (out), 12 ROUT1 (out)
part B pins: 1 C3+, 2 C3-, 7 NC, 8 NC, 13 ~{INVALID} (out), 14 ~{FORCEOFF} (in), 15 FORCEON (in), 16 C1-, 17 GND (power), 18 VL, 19 VCC (power), 20 V+, 21 C1+, 22 C2+, 23 C2-, 24 V-, 25 GND-TH (power)

## IC-TI-TUSB321AIRWBR
designator IC?, comment TUSB321AIRWBR
USB Type-C Configuration Channel Logic and Port Control with VCON; Manufacturer Name: Texas Instruments; Manufacturer Part No.: TUSB321AIRWBR
footprint IC-TI-TUSB321AIRWBR
pins: 1 CC1 (power), 2 CC2 (power), 3 CURRENT_MODE (power), 4 PORT (power), 5 VBUS_DET (power), 6 ~{VCONN_FAULT} (power), 7 OUT1 (power), 8 OUT2 (power), 9 ID (power), 10 GND (power), 11 DIR (power), 12 VDD (power)

## L-33R@100MHz-3A-25%-0603
designator L?, comment 33R@100MHz
33R@100MHz 3A EMI FILTER; Tolerance: 25%; Rating: 3A; Value: 33R@100MHz
footprint INDC1608X95N
pins: 1, 2

## L-120R@100MHz-2A-25%-0603
designator L?, comment 120R@100MHz
120R@100MHz 2A EMI FILTER; Tolerance: 25%; Rating: 2A; Value: 120R@100MHz
footprint INDC1608X95N
pins: 1, 2

## L-220R@100MHz-2A-25%-0603
designator L?, comment 220R@100MHz
220R@100MHz 2A EMI FILTER; Tolerance: 25%; Rating: 2A; Value: 220R@100MHz
footprint INDC1608X95N
pins: 1, 2

## L-Bourns-SRP4020TA-1R2M-1.2uH-4.8A-20%
designator L?, comment Rating: 4.8A  (hidden comment: 1.2uH)
1.2µH Shielded Wirewound Inductor 4.8A 30mOhm; Manufacturer Name: Bourns; Manufacturer Part No.: SRP4020TA-1R2M; Tolerance: 20%; I (saturation): 7.8A; I (RMS): 4.8A; Value: 1.2uH
footprint IND-BOURNS-SRP4020TA (Inductor shielded, 4.45mm x 4.06mm (Bourns, SSRP4020TA))
pins: 1, 2

## L-Bourns-SRP4020TA-2R2M-2.2uH-4A-20%
designator L?, comment Rating: 4A  (hidden comment: 2.2uH)
2.2µH Shielded Wirewound Inductor 4A 61mOhm Max 2-SMD; Manufacturer Name: Bourns; Manufacturer Part No.: SRP4020TA-2R2M; Tolerance: 20%; I (saturation): 6A; I (RMS): 4A; Value: 2.2uH
footprint IND-BOURNS-SRP4020TA (Inductor shielded, 4.45mm x 4.06mm (Bourns, SSRP4020TA))
pins: 1, 2

## L-Laird-35F0121-0SR-10-10A-25%
designator L?, comment 42R@100MHz
Power Supply FB 10A; Manufacturer Name: Laird; Manufacturer Part No.: 35F0121-0SR-10; Tolerance: 25%; Rating: 10A; Value: 42R@100MHz
footprint T_Laird_35F0121-0SR-10 (Power supply FB 10A)
pins: 1, 2

## L-Murata-DLW21SN900SQ2-90R@100MHz-330mA-25%
designator L?, comment 90R@100MHz
Common Mode Choke High Speed 90R 330mA; Manufacturer Name: Murata; Manufacturer Part No.: DLW21SN900SQ2; Tolerance: 25%; Rating: 330mA; Value: 90R@100MHz
footprint T_Murata_DLW21SN900SQ2 (Common Mode Choke)
pins: 1, 2, 3, 4

## L-Panasonic-EXC14CH120U-12R@100MHz-1000mA-25%
designator L?, comment 12R@100MHz
Common Mode Choke High Speed 12R 100mA; Manufacturer Name: Panasonic; Manufacturer Part No.: EXC14CH120U; Tolerance: 25%; Rating: 100mA; Value: 12R@100MHz
footprint T_Panasonic_EXC14CH120U
pins: 1, 2, 3, 4

## L-Pulse-PA4342.152NLT-1.5uH-16A-20%
designator L?, comment Rating: 16A  (hidden comment: 1.5uH)
Inductance 1.5uH, 20%, Irms=16A, Isat=33A, DCR=4.6 mOhm; Manufacturer Name: Pulse; Manufacturer Part No.: PA4342.152NLT; I (saturation): 33A; Tolerance: 20%; I (RMS): 16A; Value: 1.5uH
footprint T_INDM110100 (Inductor shielded, 11mm x 10mm (Bourns, SRP1038A; Vishay, IHLP4040DZ-8A))
pins: 1, 2

## L-Pulse-PA4342.222NLT-2.2uH-12A-20%
designator L?, comment Rating: 12A  (hidden comment: 2.2uH)
Inductance 2.2uH, 20%, Irms=12A, Isat=27A, DCR=7 mOhm; Manufacturer Name: Pulse; Manufacturer Part No.: PA4342.222NLT; I (saturation): 27A; Tolerance: 20%; I (RMS): 12A; Value: 2.2uH
footprint T_INDM110100 (Inductor shielded, 11mm x 10mm (Bourns, SRP1038A; Vishay, IHLP4040DZ-8A))
pins: 1, 2

## L-TaiyoYuden-MCF12102H500-T-50R@100MHz-160mA-25%
designator L?, comment 50R@100MHz
Common Mode Choke High Speed 50R 160mA; Manufacturer Name: Murata; Manufacturer Part No.: MCF12102H500-T; Tolerance: 25%; Rating: 160mA; Value: 50R@100MHz
footprint T_TayioYuden_MCF12102H500 (Common Mode Choke)
pins: 1, 2, 3, 4

## L-Vishay-IHLP4040DZER3R3M01-3.3uH-10A-20%
designator L?, comment Rating: 10A  (hidden comment: 3.3uH)
Inductance 3.3uH, 20%, Irms=10A, Isat=18.6A, DCR=11.8 mOhm; Manufacturer Name: Vishay; Manufacturer Part No.: IHLP4040DZER3R3M01; I (saturation): 18.6; I (RMS): 10; Tolerance: 20%; Value: 3.3uH
footprint T_INDM110100 (Inductor shielded, 11mm x 10mm (Bourns, SRP1038A; Vishay, IHLP4040DZ-8A))
pins: 1, 2

## LED-Osram-LG T67K-H2K1-24-Z
designator LED?, comment Color: GREEN  (hidden comment: LG T67K-H2K1-24-Z)
LED green Osram LG T67K-H2K1-24-Z; Manufacturer Name: Osram; Manufacturer Part No.: LG T67K-H2K1-24-Z
footprint T_Osram_T67K_GREEN (LED-Osram-T67K)
pins: A, K

## LED-Osram-LS T67K-K1L2-1-Z
designator LED?, comment Color: RED  (hidden comment: LS T67K-K1L2-1-Z)
LED red, Osram LS T67K-K1L2-1-Z; Manufacturer Part No.: LS T67K-K1L2-1-Z; Manufacturer Name: Osram
footprint T_Osram_T67K_RED (LED-Osram-T67K)
pins: A, K

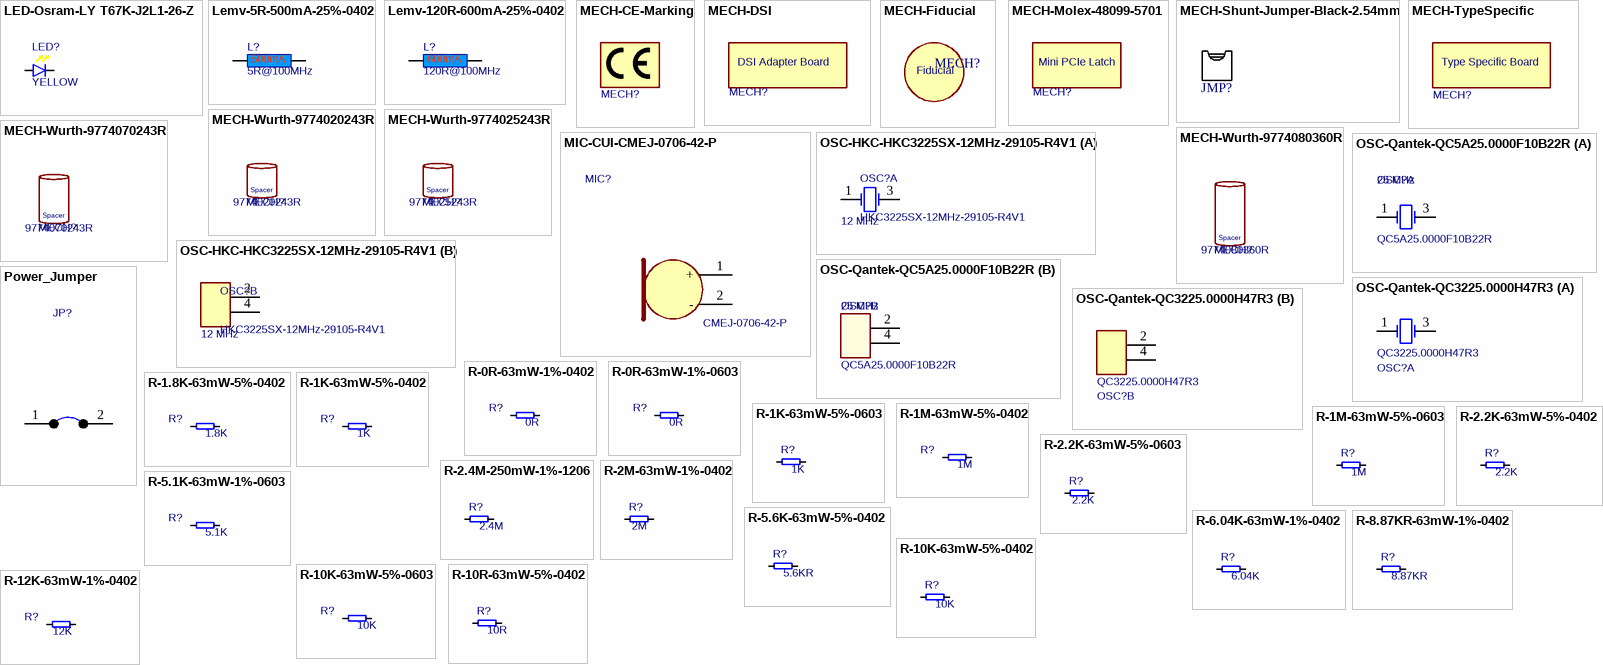
[diagram p15: symbols LED-Osram-LY T67K-J2L1-26-Z to R-12K-63mW-1%-0402]

## LED-Osram-LY T67K-J2L1-26-Z
designator LED?, comment Color: YELLOW  (hidden comment: LY T67K-J2L1-26-Z)
LED yellow Osram LY T67K-J2L1-26-Z; Manufacturer Name: Osram; Manufacturer Part No.: LY T67K-J2L1-26-Z
footprint T_Osram_T67K_YELLOW (LED-Osram-T67K)
pins: A, K

## Lemv-5R-500mA-25%-0402
designator L?, comment 5R@100MHz
5R@100MHz 500mA EMI FILTER; Manufacturer Part No.: BLM15BB050SN1D; Manufacturer: Murata; Tolerance: 25%; Rating: 500mA; Value: 5R@100MHz
footprint INDC1005X60N (Ferrite Bead  0402 (1005 metric), max height 0.55mm)
pins: 1, 2

## Lemv-120R-600mA-25%-0402
designator L?, comment 120R@100MHz
120R@100MHz 600mA EMI FILTER; Tolerance: 25%; Rating: 600mA; Value: 120R@100MHz
footprint INDC1005X60N (Ferrite Bead  0402 (1005 metric), max height 0.55mm)
pins: 1, 2

## MECH-CE-Marking
designator MECH?  (value not drawn)  (no BOM)
CE Marking
footprint T_CE_Marking (Silkscreen CE Marking)

## MECH-DSI
designator MECH?  (value not drawn)  (no BOM)
PCB Structure
footprint T_DSI_ADAPTER (DSI ADAPTER MEZZANINE)
text: DSI Adapter Board

## MECH-Fiducial
designator MECH?  (value not drawn)  (no BOM)
Fiducial
footprint T_Fiducial (Fiducial)

## MECH-Molex-48099-5701
designator MECH?, comment MECH-Mini-PCIe Latch  (value not drawn)
Mini-PCIe Latch; Manufacturer Name: Molex; Manufacturer Part No.: 48099-5701
footprint MECH-Molex-48099-5701 (Mini PCI-E Latch - 3D model only)
text: Mini PCIe Latch

## MECH-Shunt-Jumper-Black-2.54mm
designator JMP?, comment Shunt Jumper  (value not drawn)  (mechanical)
Manufacturer Name: Assmann; Manufacturer Part No.: AKSPT/G-BLACK

## MECH-TypeSpecific
designator MECH?  (value not drawn)  (no BOM)
PCB Structure
footprint T_TYPE_SPECIFIC (TYPE SPECIFIC MEZZANINE)
text: Type Specific Board

## MECH-Wurth-9774020243R
designator MECH?, comment Manufacturer Part No.: 9774020243R  (hidden comment: Wurth-9774020243R)
Round Standoff M2x0.4 (2.00mm); Manufacturer Name: Wurth
footprint MECH-Wurth-9774020243R
text: Spacer

## MECH-Wurth-9774025243R
designator MECH?, comment Manufacturer Part No.: 9774025243R  (hidden comment: Wurth-9774025243R)
Round Standoff M2x0.4 (2.50mm); Manufacturer Name: Wurth
footprint MECH-Wurth-9774025243R (Round Standoff Threaded M2x0.4 Steel 0.098" (2.50mm))
text: Spacer

## MECH-Wurth-9774070243R
designator MECH?, comment Manufacturer Part No.: 9774070243R  (hidden comment: Wurth-9774070243R)
Round Standoff M2x0.4 (7.00mm); Manufacturer Name: Wurth
footprint MECH-Wurth-9774070243R
text: Spacer

## MECH-Wurth-9774080360R
designator MECH?, comment Manufacturer Part No.: 9774080360R  (hidden comment: Wurth-9774080360R)
Round Standoff M3x0.5 (8.00mm); Manufacturer Name: Wurth
footprint MECH-Wurth-9774080360R (Round Standoff Threaded M3x0.5 Steel 0.315" (8.00mm))
text: Spacer

## MIC-CUI-CMEJ-0706-42-P
designator MIC?, comment CMEJ-0706-42-P
100Hz ~ 10kHz Analog Microphone Electret Condenser Omnidirectional; Manufacturer Name: CUI; Manufacturer Part No.: CMEJ-0706-42-P
footprint MIC-TH-1.9mm
pins: 1 +, 2 -

## OSC-HKC-HKC3225SX-12MHz-29105-R4V1
designator OSC?, comment HKC3225SX-12MHz-29105-R4V1  value 12 MHz
12MHz Ceramic SMD Crystal, Hong Kong X’tals Limited, HKC3225SX-12MHz-29105-R4V1, 30ppm, -40C to +85C; Tolerance: +/- 30 ppm; Manufacturer Name: Hong Kong X’tals Limited; Package: 3.2mm X 2.5mm; Temperature Range: -40C to +85C; Manufacturer Part No.: HKC3225SX-12MHz-29105-R4V1
footprint OSC-SMD-3.2mmx2.5mm (Oscillator SMD, 3.2mmx2.5mmx0.8mm)
part A pins: 1 OSC1, 3 OSC2
part B pins: 2 OSC2, 4 OSC3

## OSC-Qantek-QC5A25.0000F10B22R
designator OSC?, comment QC5A25.0000F10B22R  value 25 MHz
25MHz Crystal Oscillator, Qantek QC5A25.0000F10B22R, 20ppm, -40C to +85C; Tolerance: +/- 20 ppm; Manufacturer Name: QANTEK; Package: 5.0mm X 3.2mm; Temperature Range: -40C to +85C; Manufacturer Part No.: QC5A25.0000F10B22R
footprint OSC-SMD-5.0mmx3.2mm (Oscillator SMD, 5.0mmx3.2mmx0.8mm)
part A pins: 1 OSC1, 3 OSC2
part B pins: 2 OSC2, 4 OSC3

## OSC-Qantek-QC3225.0000H47R3
designator OSC?, comment QC3225.0000H47R3
25MHz Crystal Oscillator, Qantek QC3225.0000H47R3, 20ppm, -40C to +85C, 10pF; Tolerance: +/- 20 ppm; Manufacturer Name: QANTEK; Package: 3.2mm X 2.5mm; Temperature Range: -40C to +85C; Value: 25 MHz; Manufacturer Part No.: QC3225.0000H47R3
footprint OSC-SMD-3.2mmx2.5mm (Oscillator SMD, 3.2mmx2.5mmx0.8mm)
part A pins: 1 OSC1, 3 OSC2
part B pins: 2 OSC2, 4 OSC3

## Power_Jumper
designator JP?  (no BOM)
Power jumper for SOM current measurement; No. of ways: 1x2; Pitch: 5.08mm
footprint T_Jumper
pins: 1, 2

## R-0R-63mW-1%-0402
designator R?, comment 0R
Resistor 0 ohm 63mW 1% 0402; Rating: 63mW; Tolerance: 1%; Value: 0R
footprint RESC1005X40N
pins: 1, 2

## R-0R-63mW-1%-0603
designator R?, comment 0R
Resistor 0 ohm 63mW 1% 0603; Rating: 63mW; Tolerance: 1%; Value: 0R
footprint T_RESC0603X30N
pins: 1, 2

## R-1.8K-63mW-5%-0402
designator R?, comment 1.8K
Resistor 1.8 Kohm 63mW 5% 0402; Rating: 63mW; Tolerance: 5%; Value: 1.8K
footprint RESC1005X40N
pins: 1, 2

## R-1K-63mW-5%-0402
designator R?, comment 1K
Resistor 1 Kohm 63mW 5% 0402; Rating: 63mW; Tolerance: 5%; Value: 1K
footprint RESC1005X40N
pins: 1, 2

## R-1K-63mW-5%-0603
designator R?, comment 1K
Resistor 1 Kohm 63mW 5% 0603; Rating: 63mW; Tolerance: 5%; Value: 1K
footprint T_RESC0603X30N
pins: 1, 2

## R-1M-63mW-5%-0402
designator R?, comment 1M
Resistor 1 Mohm 63mW 5% 0402; Rating: 63mW; Tolerance: 5%; Value: 1M
footprint RESC1005X40N
pins: 1, 2

## R-1M-63mW-5%-0603
designator R?, comment value 1M  (hidden comment: 1MR)
Resistor 1Mohm 63mW 5% 0603; Rating: 63mW; Tolerance: 5%
footprint T_RESC0603X30N
pins: 1, 2

## R-2.2K-63mW-5%-0402
designator R?, comment 2.2K
Resistor 2.2 Kohm 63mW 5% 0402; Rating: 63mW; Tolerance: 5%; Value: 2.2K
footprint RESC1005X40N
pins: 1, 2

## R-2.2K-63mW-5%-0603
designator R?, comment 2.2K
Resistor 2.2 Kohm 63mW 5% 0603; Rating: 63mW; Tolerance: 5%; Value: 2.2K
footprint T_RESC0603X30N
pins: 1, 2

## R-2.4M-250mW-1%-1206
designator R?, comment 2.4M
Resistor 2.4 Mohm 250mW 1% 1206; Rating: 250mW; Tolerance: 1%; Value: 2.4M
footprint RESC3216X75N
pins: 1, 2

## R-2M-63mW-1%-0402
designator R?, comment 2M
Resistor 2 Mohm 63mW 1% 0402; Rating: 63mW; Tolerance: 1%; Value: 2M
footprint RESC1005X40N
pins: 1, 2

## R-5.1K-63mW-1%-0603
designator R?, comment 5.1K
Resistor 5.1 Kohm 63mW 1% 0603; Rating: 63mW; Tolerance: 1%; Value: 5.1K
footprint T_RESC0603X30N
pins: 1, 2

## R-5.6K-63mW-5%-0402
designator R?, comment value 5.6KR  (hidden comment: 5.6K)
Resistor 5.6 Kohm 63mW 5% 0402; Rating: 63mW; Tolerance: 5%
footprint RESC1005X40N
pins: 1, 2

## R-6.04K-63mW-1%-0402
designator R?, comment 6.04K
Resistor 6.04 Kohm 63mW 1% 0402; Rating: 63mW; Tolerance: 1%; Value: 6.04K
footprint RESC1005X40N
pins: 1, 2

## R-8.87KR-63mW-1%-0402
designator R?, comment value 8.87KR  (hidden comment: 8.87K)
Resistor 8.87 Kohm 63mW 1% 0402; Rating: 63mW; Tolerance: 1%
footprint RESC1005X40N
pins: 1, 2

## R-10K-63mW-5%-0402
designator R?, comment 10K
Resistor 10 Kohm 63mW 5% 0402; Rating: 63mW; Tolerance: 5%; Value: 10K
footprint RESC1005X40N
pins: 1, 2

## R-10K-63mW-5%-0603
designator R?, comment 10K
Resistor 10 Kohm 63mW 5% 0603; Rating: 63mW; Tolerance: 5%; Value: 10K
footprint T_RESC0603X30N
pins: 1, 2

## R-10R-63mW-5%-0402
designator R?, comment 10R
Resistor 10 ohm 63mW 5% 0402; Rating: 63mW; Tolerance: 5%; Value: 10R
footprint RESC1005X40N
pins: 1, 2

## R-12K-63mW-1%-0402
designator R?, comment 12K
Resistor 12 Kohm 63mW 1% 0402; Rating: 63mW; Tolerance: 1%; Value: 12K
footprint RESC1005X40N
pins: 1, 2

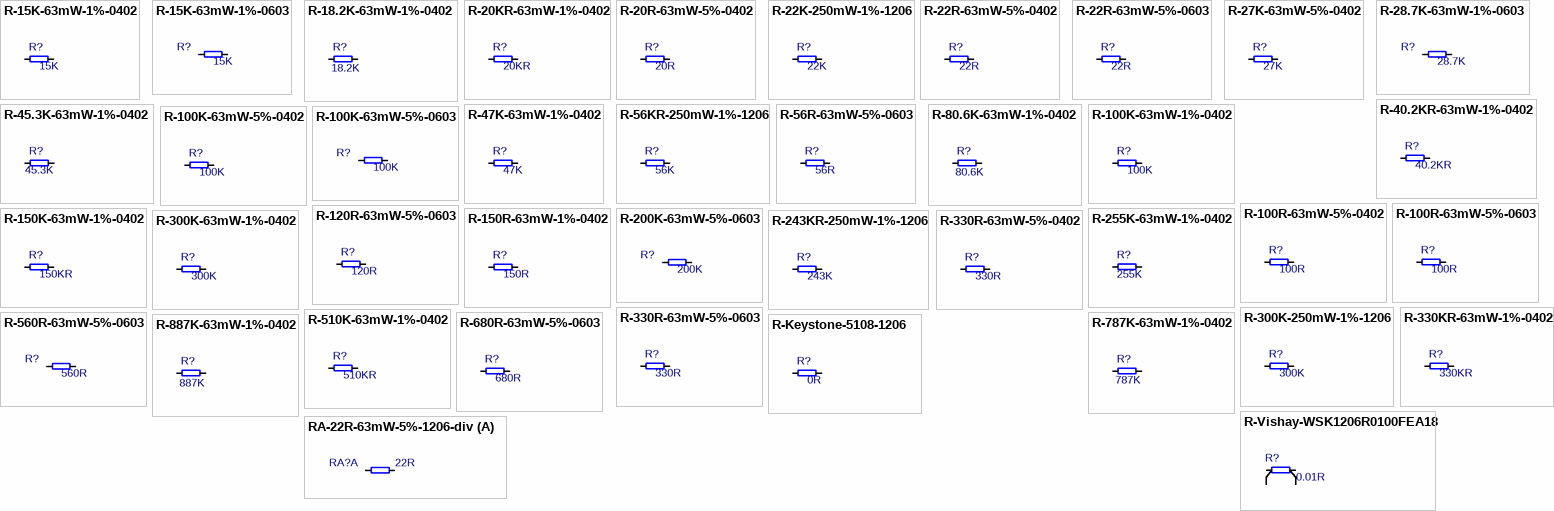
[diagram p16: symbols R-15K-63mW-1%-0402 to RA-22R-63mW-5%-1206-div]

## R-15K-63mW-1%-0402
designator R?, comment 15K
Resistor 15 Kohm 63mW 1% 0402; Rating: 63mW; Tolerance: 1%; Value: 15K
footprint RESC1005X40N
pins: 1, 2

## R-15K-63mW-1%-0603
designator R?, comment 15K
Resistor 15 Kohm 63mW 1% 0603; Rating: 63mW; Tolerance: 1%; Value: 15K
footprint T_RESC0603X30N
pins: 1, 2

## R-18.2K-63mW-1%-0402
designator R?, comment 18.2K
Resistor 18.2 Kohm 63mW 1% 0402; Rating: 63mW; Tolerance: 1%; Value: 18.2K
footprint RESC1005X40N
pins: 1, 2

## R-20KR-63mW-1%-0402
designator R?, comment value 20KR  (hidden comment: 20K)
Resistor 20 Kohm 63mW 1% 0402; Rating: 63mW; Tolerance: 1%
footprint RESC1005X40N
pins: 1, 2

## R-20R-63mW-5%-0402
designator R?, comment 20R
Resistor 20 ohm 63mW 5% 0402; Rating: 63mW; Tolerance: 5%; Value: 20R
footprint RESC1005X40N
pins: 1, 2

## R-22K-250mW-1%-1206
designator R?, comment 22K
Resistor 22 Kohm 250mW 1% 1206; Rating: 250mW; Tolerance: 1%; Value: 22K
footprint RESC3216X75N
pins: 1, 2

## R-22R-63mW-5%-0402
designator R?, comment 22R
Resistor 22 ohm 63mW 5% 0402; Rating: 63mW; Tolerance: 5%; Value: 22R
footprint RESC1005X40N
pins: 1, 2

## R-22R-63mW-5%-0603
designator R?, comment 22R
Resistor 22 ohm 63mW 5% 0603; Rating: 63mW; Tolerance: 5%; Value: 22R
footprint T_RESC0603X30N
pins: 1, 2

## R-27K-63mW-5%-0402
designator R?, comment 27K
Resistor 27 Kohm 63mW 5% 0402; Rating: 63mW; Tolerance: 5%; Value: 27K
footprint RESC1005X40N
pins: 1, 2

## R-28.7K-63mW-1%-0603
designator R?, comment 28.7K
Resistor 28.7 Kohm 63mW 1% 0603; Rating: 63mW; Tolerance: 1%; Value: 28.7K
footprint T_RESC0603X30N
pins: 1, 2

## R-40.2KR-63mW-1%-0402
designator R?, comment value 40.2KR  (hidden comment: 40.2K)
Resistor 40.2 Kohm 63mW 1% 0402; Rating: 63mW; Tolerance: 1%
footprint RESC1005X40N
pins: 1, 2

## R-45.3K-63mW-1%-0402
designator R?, comment 45.3K
Resistor 45.3 Kohm 63mW 1% 0402; Rating: 63mW; Tolerance: 1%; Value: 45.3K
footprint RESC1005X40N
pins: 1, 2

## R-47K-63mW-1%-0402
designator R?, comment 47K
Resistor 47 Kohm 63mW 1% 0402; Rating: 63mW; Tolerance: 1%; Value: 47K
footprint RESC1005X40N
pins: 1, 2

## R-56KR-250mW-1%-1206
designator R?, comment 56K
Resistor 56 Kohm 250mW 1% 1206; Rating: 250mW; Tolerance: 1%; Value: 56K
footprint RESC3216X75N
pins: 1, 2

## R-56R-63mW-5%-0603
designator R?, comment 56R
Resistor 56 ohm 63mW 5% 0603; Rating: 63mW; Tolerance: 5%; Value: 56R
footprint T_RESC0603X30N
pins: 1, 2

## R-80.6K-63mW-1%-0402
designator R?, comment 80.6K
Resistor 80.6 Kohm 63mW 1% 0402; Rating: 63mW; Tolerance: 1%; Value: 80.6K
footprint RESC1005X40N
pins: 1, 2

## R-100K-63mW-1%-0402
designator R?, comment 100K
Resistor 100 Kohm 63mW 1% 0402; Rating: 63mW; Tolerance: 1%; Value: 100K
footprint RESC1005X40N
pins: 1, 2

## R-100K-63mW-5%-0402
designator R?, comment 100K
Resistor 100 Kohm 63mW 5% 0402; Rating: 63mW; Tolerance: 5%; Value: 100K
footprint RESC1005X40N
pins: 1, 2

## R-100K-63mW-5%-0603
designator R?, comment 100K
Resistor 100 Kohm 63mW 5% 0603; Rating: 63mW; Tolerance: 5%; Value: 100K
footprint T_RESC0603X30N
pins: 1, 2

## R-100R-63mW-5%-0402
designator R?, comment 100R
Resistor 100 ohm 63mW 5% 0402; Rating: 63mW; Tolerance: 5%; Value: 100R
footprint RESC1005X40N
pins: 1, 2

## R-100R-63mW-5%-0603
designator R?, comment 100R
Resistor 100 ohm 63mW 5% 0603; Rating: 63mW; Tolerance: 5%; Value: 100R
footprint T_RESC0603X30N
pins: 1, 2

## R-120R-63mW-5%-0603
designator R?, comment 120R
Resistor 120 ohm 63mW 5% 0603; Rating: 63mW; Tolerance: 5%; Value: 120R
footprint T_RESC0603X30N
pins: 1, 2

## R-150K-63mW-1%-0402
designator R?, comment value 150KR  (hidden comment: 150K)
Resistor 150 Kohm 63mW 1% 0402; Rating: 63mW; Tolerance: 1%
footprint RESC1005X40N
pins: 1, 2

## R-150R-63mW-1%-0402
designator R?, comment 150R
Resistor 150 ohm 63mW 1% 0402; Tolerance: 1%; Rating: 63mW; Value: 150R
footprint RESC1005X40N
pins: 1, 2

## R-200K-63mW-5%-0603
designator R?, comment 200K
Resistor 200 Kohm 63mW 5% 0603; Rating: 63mW; Tolerance: 5%; Value: 200K
footprint T_RESC0603X30N
pins: 1, 2

## R-243KR-250mW-1%-1206
designator R?, comment 243K
Resistor 243 Kohm 250mW 1% 1206; Rating: 250mW; Tolerance: 1%; Value: 243K
footprint RESC3216X75N
pins: 1, 2

## R-255K-63mW-1%-0402
designator R?, comment 255k
Resistor 255 Kohm 63mW 1% 0402; Rating: 63mW; Tolerance: 1%; Value: 255K
footprint RESC1005X40N
pins: 1, 2

## R-300K-63mW-1%-0402
designator R?, comment 300K
Resistor 300 Kohm 63mW 1% 0402; Rating: 63mW; Tolerance: 1%; Value: 300K
footprint RESC1005X40N
pins: 1, 2

## R-300K-250mW-1%-1206
designator R?, comment 300K
Resistor 300 Kohm 250mW 1% 1206; Rating: 250mW; Tolerance: 1%; Value: 300K
footprint RESC3216X75N
pins: 1, 2

## R-330KR-63mW-1%-0402
designator R?, comment value 330KR  (hidden comment: 330K)
Resistor 330 Kohm 63mW 1% 0402; Rating: 63mW; Tolerance: 1%
footprint RESC1005X40N
pins: 1, 2

## R-330R-63mW-5%-0402
designator R?, comment 330R
Resistor 330 ohm 63mW 5% 0402; Rating: 63mW; Tolerance: 5%; Value: 330R
footprint RESC1005X40N
pins: 1, 2

## R-330R-63mW-5%-0603
designator R?, comment 330R
Resistor 330 ohm 63mW 5% 0603; Rating: 63mW; Tolerance: 5%; Value: 330R
footprint T_RESC0603X30N
pins: 1, 2

## R-510K-63mW-1%-0402
designator R?, comment value 510KR  (hidden comment: 510K)
Resistor 510 Kohm 63mW 1% 0402; Rating: 63mW; Tolerance: 1%
footprint RESC1005X40N
pins: 1, 2

## R-560R-63mW-5%-0603
designator R?, comment 560R
Resistor 560 ohm 63mW 5% 0603; Rating: 63mW; Tolerance: 5%; Value: 560R
footprint T_RESC0603X30N
pins: 1, 2

## R-680R-63mW-5%-0603
designator R?, comment 680R
Resistor 680 ohm 63mW 5% 0603; Rating: 63mW; Tolerance: 5%; Value: 680R
footprint T_RESC0603X30N
pins: 1, 2

## R-787K-63mW-1%-0402
designator R?, comment 787K
Resistor 787 Kohm 63mW 1% 0402; Rating: 63mW; Tolerance: 1%; Value: 787K
footprint RESC1005X40N
pins: 1, 2

## R-887K-63mW-1%-0402
designator R?, comment 887K
Resistor 887 Kohm 63mW 1% 0402; Rating: 63mW; Tolerance: 1%; Value: 887K
footprint RESC1005X40N
pins: 1, 2

## R-Keystone-5108-1206
designator R?, comment 0R
True 0R Shunt, 0.2mR max, 0.5W,  20A, Chip Resistor 1206; Manufacturer Name: Keystone; Manufacturer Part No.: 5108; Rating: 20A; Tolerance: 0.2mR; Value: 0R
footprint RESC3216X75N
pins: 1, 2

## R-Vishay-WSK1206R0100FEA18
designator R?, comment 0.01R
10 mOhms ±1% 0.5W,Chip Resistor 1206 (3216 Metric) Current Sense, Moisture Resistant, Pulse Withstanding Metal Element; Manufacturer Name: Vishay; Manufacturer Part No.: WSK1206R0100FEA18; Rating: 0.5W; Tolerance: 1%; Value: 0.01R
footprint RESWSK1206 (4-terminal resistor 1206 (3216 metric))
pins: 1, 2, 3, 4

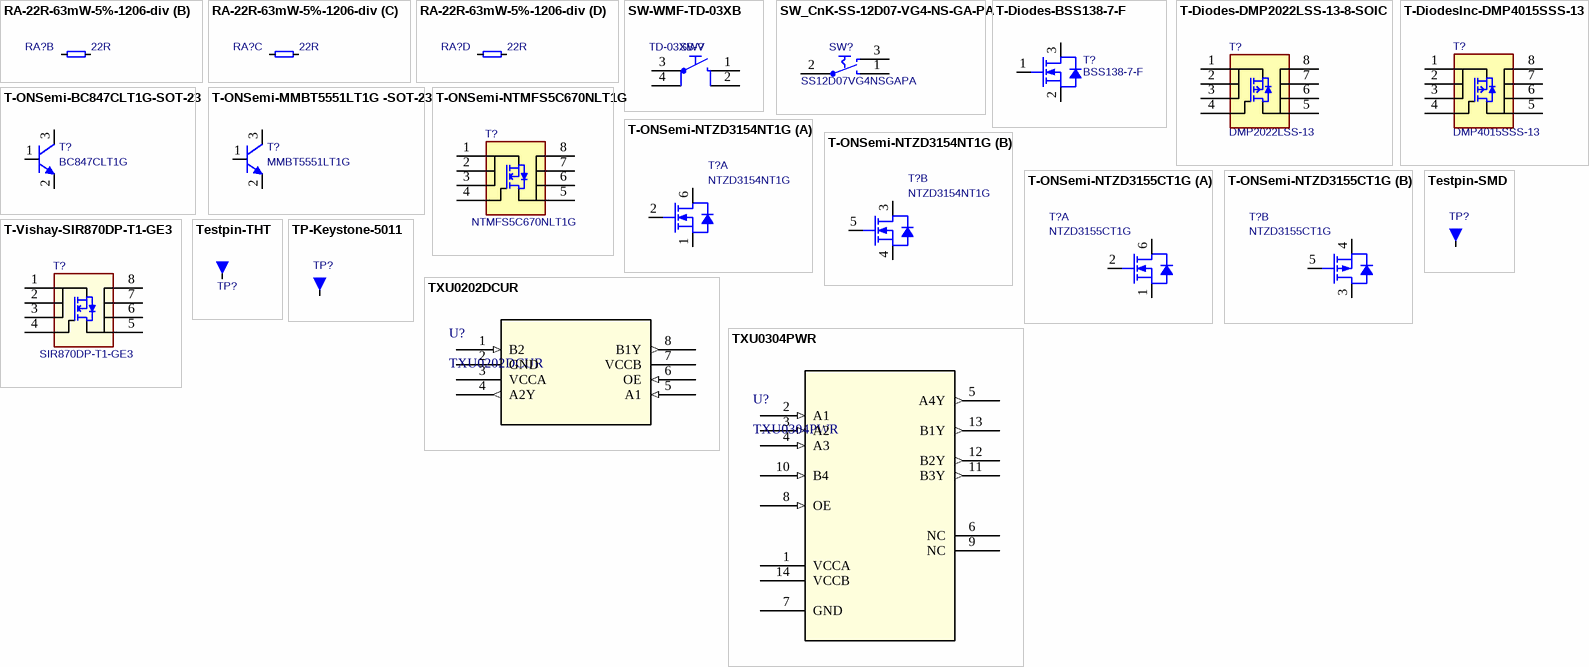
[diagram p17: symbols RA-22R-63mW-5%-1206-div to TXU0304PWR]

## RA-22R-63mW-5%-1206-div
designator RA?, comment 22R
Resistor Array 22 R 63mW 5% 1206; Tolerance: 5%; Power Dissipation: 63mW; Value: 22R
footprint T_Resistor_Array_X4 (Resistor Array 0.8mm)
part A pins: 1, 5
part B pins: 2, 6
part C pins: 3, 7
part D pins: 4, 8

## SW-WMF-TD-03XB
designator SW?, comment Manufacturer Part No.: TD-03XB-V  (hidden comment: TD-03XB)
Push Button; Manufacturer Name: Wealth Metal; Rating: 50mA
footprint T_WMF_TD-03XB (Push Button)
pins: 1, 2, 3, 4

## SW_CnK-SS-12D07-VG4-NS-GA-PA
designator SW?, comment SS12D07VG4NSGAPA
Switch; Manufacturer Name: C&K; Rating: 0.3A; Manufacturer Part No.: SS12D07VG4NSGAPA
footprint T_See-Plus_SS-12D01-VG2 (Slide Switch)
pins: 1, 2, 3

## T-Diodes-BSS138-7-F
designator T?, comment BSS138-7-F
N-channel MOSFET, BSS138-7-F; Manufacturer Name: Diodes; Manufacturer Part No.: BSS138-7-F
footprint SOT95P237X112-3N (SOT23, 3-Leads, Body 3.0x2.6mm (max), Pitch 0.95mm, IPC Medium Density)
pins: 1 G, 2 S, 3 D

## T-Diodes-DMP2022LSS-13-8-SOIC
designator T?, comment DMP2022LSS-13
p-channel MOSFET, DMP2022LSS-13; Manufacturer Name: DIODES; Manufacturer Part No.: DMP2022LSS-13
footprint SOIC127P600X173-8N
pins: 1 S, 2 S, 3 S, 4 G, 5 D, 6 D, 7 D, 8 D

## T-DiodesInc-DMP4015SSS-13
designator T?, comment DMP4015SSS-13
P-channel MOSFET, DMP4015SSS-13; Manufacturer Name: Diodes Inc; Manufacturer Part No.: DMP4015SSS-13
footprint SOIC127P600X173-8N
pins: 1 S, 2 S, 3 S, 4 G, 5 D, 6 D, 7 D, 8 D

## T-ONSemi-BC847CLT1G-SOT-23
designator T?, comment BC847CLT1G
Bipolar (BJT) Transistor NPN 45V 100mA 100MHz 300mW Surface Mount SOT-23-3; Manufacturer Name: ONSemi; Manufacturer Part No.: BC847CLT1G
footprint ONSC-SOT-23-3-318-08_V (SOT23, 3-Leads, Body 2.92x1.3mm, Pitch 0.95mm)
pins: 1 B, 2 E, 3 C

## T-ONSemi-MMBT5551LT1G -SOT-23
designator T?, comment MMBT5551LT1G
Bipolar Transistor NPN 160V 600mA  225mW Surface Mount SOT-23-3; Manufacturer Name: ONSemi; Manufacturer Part No.: MMBT5551LT1G
footprint ONSC-SOT-23-3-318-08_V (SOT23, 3-Leads, Body 2.92x1.3mm, Pitch 0.95mm)
pins: 1 B, 2 E, 3 C

## T-ONSemi-NTMFS5C670NLT1G
designator T?, comment NTMFS5C670NLT1G
MOSFET N-CH 60V 68A SO8FL; Manufacturer Name: ONSemi; Manufacturer Part No.: NTMFS5C670NLT1G
footprint T_ONSemi_NTMFS5C670NLT1G
pins: 1 S, 2 S, 3 S, 4 G, 5 D, 6 D, 7 D, 8 D

## T-ONSemi-NTZD3154NT1G
designator T?  Manufacturer Part No.: NTZD3154NT1G  (hidden comment: T-ONSemi-NTZD3154NT1G)
Dual N-Channel 20V (D-S)  MOSFET; Manufacturer Name: ONSemi
footprint SOTFL50P160X60-6N
part A pins: 1 S, 2 G, 6 D
part B pins: 3 D, 4 S, 5 G

## T-ONSemi-NTZD3155CT1G
designator T?, comment NTZD3155CT1G
N- and P-Channel MOSFET 20V; Manufacturer Name: ONSemi; Manufacturer Part No.: NTZD3155CT1G
footprint SOTFL50P160X60-6N
part A pins: 1 S, 2 G, 6 D
part B pins: 3 D, 4 S, 5 G

## T-Vishay-SIR870DP-T1-GE3
designator T?, comment SIR870DP-T1-GE3
N-Channel 100V MOSFET; Manufacturer Name: Vishay; Manufacturer Part No.: SIR870DP-T1-GE3
footprint TRANS-PowerPAK-SO-8 (PowerPAK SO-8 SINGLE MOUNTING 6.15mm x 5.15mm)
pins: 1 S, 2 S, 3 S, 4 G, 5 D, 6 D, 7 D, 8 D

## Testpin-SMD
designator TP?  (value not drawn)  (no BOM)
Testpin SMD
footprint T_TP-SMD (Testpin SMD)
pins: 1

## Testpin-THT
designator TP?  (value not drawn)  (no BOM)
Testpin THT
footprint T_TP-THT (Testpin TH)
pins: 1

## TP-Keystone-5011
designator TP?, comment 5011  (value not drawn)
Testpin Eye TH; Manufacturer Name: Keystone; Manufacturer Part No.: 5011
footprint T_TP-THT - EYE (Testpin TH)
pins: 1

## TXU0202DCUR
designator U?
Two channel fixed-direction level shifter with channels in opposite direction 8-VSSOP -40 to 125; Manufacturer_Name: Texas Instruments; Copyright: Copyright (C) 2026 Ultra Librarian. All rights reserved.; Manufacturer_Part_Number: TXU0202DCUR; RefDes: RefDes; Type: Type
footprint SO8_DCU_TEX
pins: 1 B2 (in), 2 GND (power), 3 VCCA (power), 4 A2Y (out), 5 A1 (in), 6 OE (in), 7 VCCB (power), 8 B1Y (out)

## TXU0304PWR
designator U?
Four-channel fixed multidirectional level shifter 14-TSSOP -40 to 125; Manufacturer_Name: Texas Instruments; Copyright: Copyright (C) 2026 Ultra Librarian. All rights reserved.; Manufacturer_Part_Number: TXU0304PWR; RefDes: RefDes; Type: Type
footprint TSSOP14_PW_TEX
pins: 1 VCCA (power), 2 A1 (in), 3 A2 (in), 4 A3 (in), 5 A4Y (out), 6 NC, 7 GND (power), 8 OE (in), 9 NC, 10 B4 (in), 11 B3Y (out), 12 B2Y (out), 13 B1Y (out), 14 VCCB (power)